# Altium integrated library ATK-CLRK3506B V1.0.IntLib: 69 symbols
Pins are listed as number, name and electrical type; pins without a type are passive.

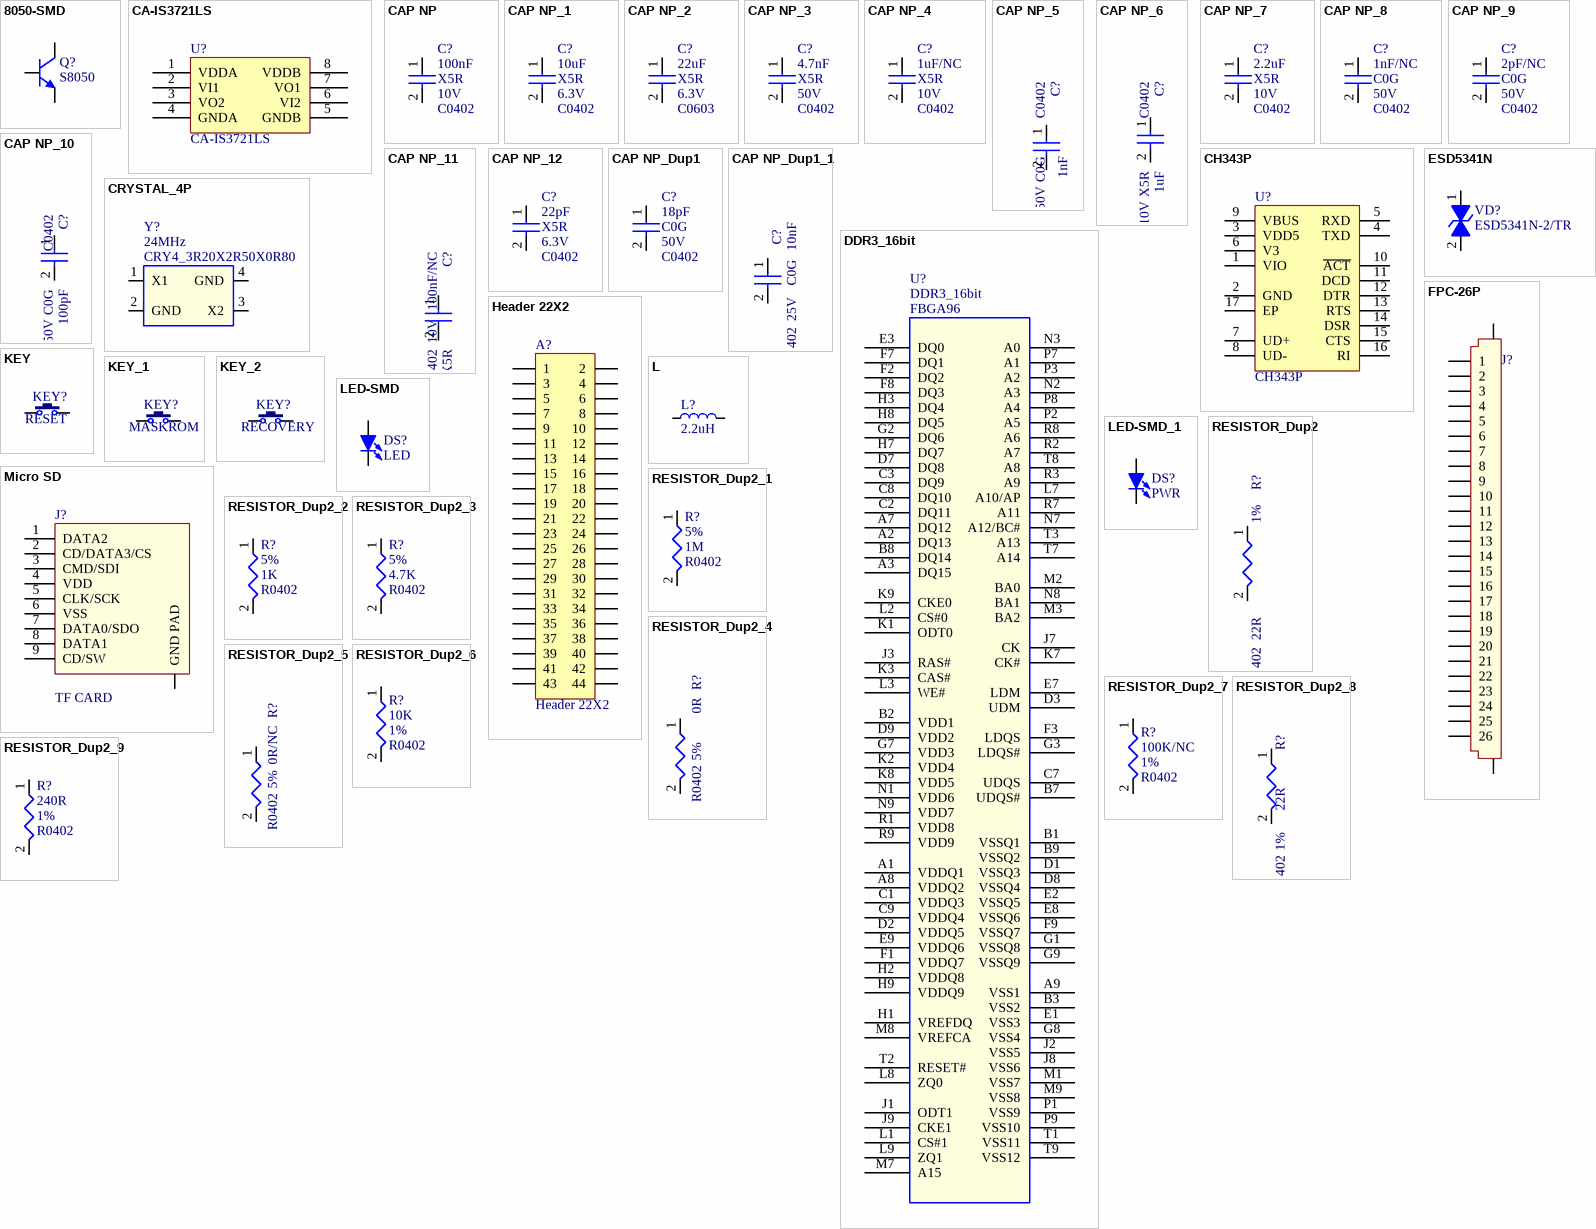
[diagram p0: symbols 8050-SMD to RESISTOR_Dup2_9]

## 8050-SMD
designator Q?, comment S8050
高频放大-NPN型; 版权归属: 正点原子; 属性: 40V 1.5A 1W 100MHZ; Parameter: 三极管; BOM名称: 高频放大-NPN型; 学习资源: www.ooocke.com
footprint SOT23-3N (3x1.3x1mm(长宽高))
footprint SOT23-3L (3x1.3x1mm(长宽高))
footprint SOT23-3M (3x1.3x1mm(长宽高))
footprint SOT323-3L (2x2.2x0.9mm(长宽高))
footprint SOT323-3N (2x2.2x0.9mm(长宽高))
footprint SOT323-3M (2x2.2x0.9mm(长宽高))
pins: 1 B, 2 E, 3 C

## CA-IS3721LS
designator U?
footprint SOIC-8 6.2*5.1 (SOIC-8 6.2*5.1mm)
pins: 1 VDDA, 2 VI1, 3 VO2, 4 GNDA, 5 GNDB, 6 VI2, 7 VO1, 8 VDDB

## CAP NP
designator C?, comment 100nF  Dielectric: X5R  PCB Footprint: C0402  Voltage: 10V
cap,100.00nF,+/-10%,10V,X5R,C0402; Manufacturer PN: 0402X104K100NT; Manufacturer: FH(风华); Tolerance: ±10%; Priority: A; RK PN: 902004351; Created by: JJJ; Part Type: 一般用片状陶瓷电容
footprint C0402
pins: 1, 2

## CAP NP_1
designator C?, comment 10uF  Dielectric: X5R  PCB Footprint: C0402  Voltage: 6.3V
一般用片状陶瓷电容(GRM),cap,10uF,±20%,6.3V,X5R,C0402; Manufacturer PN: 0402X104K100NT; Manufacturer: FH(风华); Tolerance: ±10%; Priority: A; RK PN: 902004351; Created by: JJJ; Part Type: 一般用片状陶瓷电容
footprint C0402
pins: 1, 2

## CAP NP_2
designator C?, comment 22uF  Dielectric: X5R  PCB Footprint: C0603  Voltage: 6.3V
一般用片状陶瓷电容(GRM),cap,22uF,±20%,6.3V,X5R,C0603; Manufacturer PN: 0402X104K100NT; Manufacturer: FH(风华); Tolerance: ±10%; Priority: A; RK PN: 902004351; Created by: JJJ; Part Type: 一般用片状陶瓷电容
footprint C0402
footprint C0603
pins: 1, 2

## CAP NP_3
designator C?, comment 4.7nF  Dielectric: X5R  PCB Footprint: C0402  Voltage: 50V
cap,4.7nF,+/-10%,50V,X5R,C0402; Manufacturer PN: 0402X104K100NT; Manufacturer: FH(风华); Tolerance: ±10%; Priority: A; RK PN: 902004351; Created by: JJJ; Part Type: 一般用片状陶瓷电容
footprint C0402
pins: 1, 2

## CAP NP_4
designator C?, comment 1uF/NC  Dielectric: X5R  PCB Footprint: C0402  Voltage: 10V
cap,1uF,+/-10%,10V,X5R,C0402; Manufacturer PN: 0402X104K100NT; Manufacturer: FH(风华); Tolerance: ±10%; Priority: A; RK PN: 902004351; Created by: JJJ; Part Type: 一般用片状陶瓷电容
footprint C0402
pins: 1, 2

## CAP NP_5
designator C?, comment 1nF  Dielectric: C0G  PCB Footprint: C0402  Voltage: 50V
一般用片状陶瓷电容(GRM),cap,1nF,±5%,50V,C0G,C0402; Manufacturer PN: 0402X104K100NT; Manufacturer: FH(风华); Tolerance: ±10%; Priority: A; RK PN: 902004351; Created by: JJJ; Part Type: 一般用片状陶瓷电容
footprint C0402
pins: 1, 2

## CAP NP_6
designator C?, comment 1uF  Dielectric: X5R  PCB Footprint: C0402  Voltage: 10V
cap,1uF,+/-10%,10V,X5R,C0402; Manufacturer PN: 0402X104K100NT; Manufacturer: FH(风华); Tolerance: ±10%; Priority: A; RK PN: 902004351; Created by: JJJ; Part Type: 一般用片状陶瓷电容
footprint C0402
pins: 1, 2

## CAP NP_7
designator C?, comment 2.2uF  Dielectric: X5R  PCB Footprint: C0402  Voltage: 10V
cap,2.2uF,+/-10%,10V,X5R,C0402; Manufacturer PN: 0402X104K100NT; Manufacturer: FH(风华); Tolerance: ±10%; Priority: A; RK PN: 902004351; Created by: JJJ; Part Type: 一般用片状陶瓷电容
footprint C0402
pins: 1, 2

## CAP NP_8
designator C?, comment 1nF/NC  Dielectric: C0G  PCB Footprint: C0402  Voltage: 50V
一般用片状陶瓷电容(GRM),cap,1nF,±5%,50V,C0G,C0402; Manufacturer PN: 0402X104K100NT; Manufacturer: FH(风华); Tolerance: ±10%; Priority: A; RK PN: 902004351; Created by: JJJ; Part Type: 一般用片状陶瓷电容
footprint C0402
pins: 1, 2

## CAP NP_9
designator C?, comment 2pF/NC  Dielectric: C0G  PCB Footprint: C0402  Voltage: 50V
一般用片状陶瓷电容(GRM),cap,2nF,±5%,50V,C0G,C0402; Manufacturer PN: 0402X104K100NT; Manufacturer: FH(风华); Tolerance: ±10%; Priority: A; RK PN: 902004351; Created by: JJJ; Part Type: 一般用片状陶瓷电容
footprint C0402
pins: 1, 2

## CAP NP_10
designator C?, comment 100pF  Dielectric: C0G  PCB Footprint: C0402  Voltage: 50V
一般用片状陶瓷电容(GRM),cap,100pF,±5%,50V,C0G,C0402; Manufacturer PN: 0402X104K100NT; Manufacturer: FH(风华); Tolerance: ±10%; Priority: A; RK PN: 902004351; Created by: JJJ; Part Type: 一般用片状陶瓷电容
footprint C0402
pins: 1, 2

## CAP NP_11
designator C?, comment 100nF/NC  Dielectric: X5R  PCB Footprint: C0402  Voltage: 10V
cap,100.00nF,+/-10%,10V,X5R,C0402; Manufacturer PN: 0402X104K100NT; Manufacturer: FH(风华); Tolerance: ±10%; Priority: A; RK PN: 902004351; Created by: JJJ; Part Type: 一般用片状陶瓷电容
footprint C0402
pins: 1, 2

## CAP NP_12
designator C?, comment 22pF  Dielectric: X5R  PCB Footprint: C0402  Voltage: 6.3V
一般用片状陶瓷电容(GRM),cap,22pF,±20%,6.3V,X5R,C0402; Manufacturer PN: 0402X104K100NT; Manufacturer: FH(风华); Tolerance: ±10%; Priority: A; RK PN: 902004351; Created by: JJJ; Part Type: 一般用片状陶瓷电容
footprint C0402
pins: 1, 2

## CAP NP_Dup1
designator C?, comment 18pF  Voltage: 50V  PCB Footprint: C0402  Dielectric: C0G
cap,18.00pF,+/-5%,50V,C0G,C0402; Manufacturer PN: C1005C0G1H180J050BA; Manufacturer: TDK; C_Voltage: 6.3V; Tolerance: 5%; Priority: A; Number: 37; Created by: JJJ; Part Type: C0402; RK PN: C1005C0G1H180J050BA
footprint C0402
pins: 1, 2

## CAP NP_Dup1_1
designator C?, comment 10nF  Voltage: 25V  PCB Footprint: C0402  Dielectric: C0G
cap,10nF,+/-5%,25V,C0G,C0402; Manufacturer PN: C1005C0G1H180J050BA; Manufacturer: TDK; C_Voltage: 6.3V; Tolerance: 5%; Priority: A; Number: 37; Created by: JJJ; Part Type: C0402; RK PN: C1005C0G1H180J050BA
footprint C0402
pins: 1, 2

## CH343P
designator U?
USB2UART
footprint TQFN-16 (CH343P)
footprint QFN-16-1EP_3X3MM_P0.5MM_EP1.75X1.75MM
pins: 1 VIO, 2 GND, 3 VDD5, 4 TXD, 5 RXD, 6 V3, 7 UD+, 8 UD-, 9 VBUS, 10 ~{ACT}, 11 DCD, 12 DTR, 13 RTS, 14 DSR, 15 CTS, 16 RI, 17 EP

## CRYSTAL_4P
designator Y?, comment 24MHz  PCB Footprint: CRY4_3R20X2R50X0R80
无源晶振，24M，3225,±10ppm，12pF，Hosonic; Manufacturer PN: E3SB24.0000F12E11; Manufacturer: Hosonic(鸿星电子); Priority: A; RK PN: 999,000,104; Created by: JJJ; Part Type: CRYSTAL
footprint CRY-3225
footprint CRY4_3R20X2R50X0R80
footprint XTAL-3225
pins: 1 X1, 2 GND (power), 3 X2, 4 GND (power)

## DDR3_16bit
designator U?  PCB Footprint: FBGA96
256x16; Manufacturer: Samsung（三星）; Manufacturer PN: K4B2G1646F-BYMA; RK PN: DDR3; Priority: A; Part Type: DRAM; Created by: JJJ
footprint DDRII_X16
footprint FBGA96_14R00X11R00X1R20
pins: A1 VDDQ1, A2 DQ13, A3 DQ15, A7 DQ12, A8 VDDQ2, A9 VSS1, B1 VSSQ1, B2 VDD1, B3 VSS2, B7 UDQS#, B8 DQ14, B9 VSSQ2, C1 VDDQ3, C2 DQ11, C3 DQ9, C7 UDQS, C8 DQ10, C9 VDDQ4, D1 VSSQ3, D2 VDDQ5, D3 UDM, D7 DQ8, D8 VSSQ4, D9 VDD2, E1 VSS3, E2 VSSQ5, E3 DQ0, E7 LDM, E8 VSSQ6, E9 VDDQ6, F1 VDDQ7, F2 DQ2, F3 LDQS, F7 DQ1, F8 DQ3, F9 VSSQ7, G1 VSSQ8, G2 DQ6, G3 LDQS#, G7 VDD3, G8 VSS4, G9 VSSQ9, H1 VREFDQ, H2 VDDQ8, H3 DQ4, H7 DQ7, H8 DQ5, H9 VDDQ9, J1 ODT1, J2 VSS5, J3 RAS#, J7 CK, J8 VSS6, J9 CKE1, K1 ODT0, K2 VDD4, K3 CAS#, K7 CK#, K8 VDD5, K9 CKE0, L1 CS#1, L2 CS#0, L3 WE#, L7 A10/AP, L8 ZQ0, L9 ZQ1, M1 VSS7, M2 BA0, M3 BA2, M7 A15, M8 VREFCA, M9 VSS8, N1 VDD6, N2 A3, N3 A0, N7 A12/BC#, N8 BA1, N9 VDD7, P1 VSS9, P2 A5, P3 A2, P7 A1, P8 A4, P9 VSS10, R1 VDD8, R2 A7, R3 A9, R7 A11, R8 A6, R9 VDD9, T1 VSS11, T2 RESET#, T3 A13, T7 A14, T8 A8, T9 VSS12

## ESD5341N
designator VD?, comment ESD5341N-2/TR
ESD二极管-单向
footprint ESD0402
pins: 1, 2

## FPC-26P
designator J?, comment FPC0.5-26P  (value not drawn)
FPC连接器; 版权归属: 正点原子; Parameter: 接口器件; BOM名称: FPC连接器; 学习资源: www.openedv.com
footprint FPC 1.25 26P V-T (FPC插座1.25mm 26P 立式直插)
footprint FPC 1.0 26P H-S (FPC座1.0mm 26P 卧式贴片)
footprint FPC0.5 2H-S-W-26P (长：17.2mm，宽：5.2mm，高：2mm)
footprint FPC 0.5 26P V-S (FPC座 0.5mm 26P 立式贴片)
footprint HEADER 2.0 2X11P (2.0mm 直插排针)
footprint FPC 0.5 26P V-S (FPC座 0.5mm 26P 立式贴片)
pins: 0, 0, 1, 2, 3, 4, 5, 6, 7, 8, 9, 10, 11, 12, 13, 14, 15, 16, 17, 18, 19, 20, 21, 22, 23, 24, 25, 26

## Header 22X2
designator A?
22*2P接插件; 版权归属: 正点原子; Parameter: 接插件; 学习资源: www.openedv.com
footprint HDR-22X2 (双排排针，22x2脚)
pins: 1, 2, 3, 4, 5, 6, 7, 8, 9, 10, 11, 12, 13, 14, 15, 16, 17, 18, 19, 20, 21, 22, 23, 24, 25, 26, 27, 28, 29, 30, 31, 32, 33, 34, 35, 36, 37, 38, 39, 40, 41, 42, 43, 44

## KEY
designator KEY?, comment RESET
按键; BOM名称: 3x6轻触开关; 版权归属: 正点原子; 学习资源: www.openedv.com
footprint TSW DIP-6*6*5 (6*6*5mm)
footprint TSW SMD-2S
footprint TSW SMD-3*6*2.5 (3*6*2.5mm)
footprint TSW SMD-3*6*4.3 (3*6*4.3mm)
footprint TSW SMD-3*6*5 (3*6*5mm)
footprint KEY_SOP324225 (KEY,3.2mm*4.2mm*2.5mm)
pins: 1, 2

## KEY_1
designator KEY?, comment MASKROM
按键; BOM名称: 3x6轻触开关; 版权归属: 正点原子; 学习资源: www.openedv.com
footprint TSW DIP-6*6*5 (6*6*5mm)
footprint TSW SMD-2S
footprint TSW SMD-3*6*2.5 (3*6*2.5mm)
footprint TSW SMD-3*6*4.3 (3*6*4.3mm)
footprint TSW SMD-3*6*5 (3*6*5mm)
footprint KEY_SOP324225 (KEY,3.2mm*4.2mm*2.5mm)
pins: 1, 2

## KEY_2
designator KEY?, comment RECOVERY
按键; BOM名称: 3x6轻触开关; 版权归属: 正点原子; 学习资源: www.openedv.com
footprint TSW DIP-6*6*5 (6*6*5mm)
footprint TSW SMD-2S
footprint TSW SMD-3*6*2.5 (3*6*2.5mm)
footprint TSW SMD-3*6*4.3 (3*6*4.3mm)
footprint TSW SMD-3*6*5 (3*6*5mm)
footprint KEY_SOP324225 (KEY,3.2mm*4.2mm*2.5mm)
pins: 1, 2

## L
designator L?, comment 2.2uH
一体成型电感，厂商:长江微电，型号：FTC201610S2R2MBCA，额定电流2.5A，饱和电流3.0A; BOM名称: 小功率贴片电感; 版权归属: 正点原子; Parameter: 电感/磁珠; 学习资源: www.openedv.com
footprint L 0402 (小功率贴片电感)
footprint L 0603 (小功率贴片电感)
footprint L 0805 (小功率贴片电感)
footprint L 1206 (小功率贴片电感)
footprint L 1210 (小功率贴片电感)
footprint L 1806 (小功率贴片电感)
footprint L 1812 (小功率贴片电感)
footprint L 1008 (2.5mm*2.0mm*1.2mm(长*宽*高）)
footprint L_2520
footprint Model Name (Footprint not found)
footprint L 0806/2016
pins: 1, 2

## LED-SMD
designator DS?, comment LED
贴片黄绿LED; BOM名称: 贴片LED; 版权归属: 正点原子; Parameter: 发光二极管; 学习资源: www.openedv.com
footprint LED 0603W (白色0603LED)
footprint LED 0603R (红色0603LED)
footprint LED 0603B (蓝色0603LED)
footprint LED 0603G (绿色0603LED)
footprint LED 0603Y (黄色0603LED)
footprint LED 0805G (绿色0805LED)
footprint LED 0805R (红色0805LED)
footprint LED 0805B (蓝色0805LED)
footprint LED 0805Y (黄色0805LED)
footprint LED 3528 (白色3528LED)
footprint LED 1206G (绿色1206LED)
footprint LED 5730-V (紫色5730LED)
footprint LED 1206Y (黄色1206LED)
footprint LED 0805W (白色0805LED)
footprint LED 1206B (蓝色1206LED)
footprint LED 1206W (白色1206LED)
footprint LED 1206R (红色1206LED)
pins: 1 A, 2 K

## LED-SMD_1
designator DS?, comment PWR
贴片LED; 版权归属: 正点原子; Parameter: 发光二极管; BOM名称: 贴片LED; 学习资源: www.openedv.com
footprint LED 0603W (白色0603LED)
footprint LED 0603R (红色0603LED)
footprint LED 0603B (蓝色0603LED)
footprint LED 0603G (绿色0603LED)
footprint LED 0603Y (黄色0603LED)
footprint LED 0805G (绿色0805LED)
footprint LED 0805R (红色0805LED)
footprint LED 0805B (蓝色0805LED)
footprint LED 0805Y (黄色0805LED)
footprint LED 3528 (白色3528LED)
footprint LED 1206G (绿色1206LED)
footprint LED 5730-V (紫色5730LED)
footprint LED 1206Y (黄色1206LED)
footprint LED 0805W (白色0805LED)
footprint LED 1206B (蓝色1206LED)
footprint LED 1206W (白色1206LED)
footprint LED 1206R (红色1206LED)
pins: 1 A, 2 K

## Micro SD
designator J?, comment TF CARD
Micro SD卡; 版权归属: 正点原子; BOM名称: Micro SD卡; 学习资源: www.openedv.com
footprint Micro SD
pins: 0 GND PAD, 1 DATA2, 2 CD/DATA3/CS, 3 CMD/SDI, 4 VDD, 5 CLK/SCK, 6 VSS, 7 DATA0/SDO, 8 DATA1, 9 CD/SW

## RESISTOR_Dup2
designator R?, comment 22R  PCB Footprint: R0402  Tolerance: 1%
通用厚膜电阻,22R,+/-1%,R0402,1/16W.; Manufacturer: YAGEO; RK PN: RC0402JR-0722RL; Priority: A; Wattage: 1/16W; Part Type: 通用厚膜电阻; Manufacturer PN: RC0402JR-0722RL; Created by: YTL
footprint R0402
pins: 1, 2

## RESISTOR_Dup2_1
designator R?, comment 1M  PCB Footprint: R0402  Tolerance: 5%
通用厚膜电阻,1M,+/-5%,R0402,1/16W.; Manufacturer: YAGEO; RK PN: RC0402JR-0722RL; Priority: A; Wattage: 1/16W; Part Type: 通用厚膜电阻; Manufacturer PN: RC0402JR-0722RL; Created by: YTL
footprint R0402
pins: 1, 2

## RESISTOR_Dup2_2
designator R?, comment 1K  PCB Footprint: R0402  Tolerance: 5%
通用厚膜电阻,1K,+/-5%,R0402,1/16W.; Manufacturer: YAGEO; RK PN: RC0402JR-0722RL; Priority: A; Wattage: 1/16W; Part Type: 通用厚膜电阻; Manufacturer PN: RC0402JR-0722RL; Created by: YTL
footprint R0402
pins: 1, 2

## RESISTOR_Dup2_3
designator R?, comment 4.7K  PCB Footprint: R0402  Tolerance: 5%
通用厚膜电阻,4.7K,+/-5%,R0402,1/16W.; Manufacturer: YAGEO; RK PN: RC0402JR-0722RL; Priority: A; Wattage: 1/16W; Part Type: 通用厚膜电阻; Manufacturer PN: RC0402JR-0722RL; Created by: YTL
footprint R0402
pins: 1, 2

## RESISTOR_Dup2_4
designator R?, comment 0R  PCB Footprint: R0402  Tolerance: 5%
通用厚膜电阻,0R,+/-5%,R0402,1/16W.; Manufacturer: YAGEO; RK PN: RC0402JR-0722RL; Priority: A; Wattage: 1/16W; Part Type: 通用厚膜电阻; Manufacturer PN: RC0402JR-0722RL; Created by: YTL
footprint R0402
pins: 1, 2

## RESISTOR_Dup2_5
designator R?, comment 0R/NC  PCB Footprint: R0402  Tolerance: 5%
通用厚膜电阻,0R,+/-5%,R0402,1/16W.; Manufacturer: YAGEO; RK PN: RC0402JR-0722RL; Priority: A; Wattage: 1/16W; Part Type: 通用厚膜电阻; Manufacturer PN: RC0402JR-0722RL; Created by: YTL
footprint R0402
pins: 1, 2

## RESISTOR_Dup2_6
designator R?, comment 10K  PCB Footprint: R0402  Tolerance: 1%
通用厚膜电阻,10K,+/-1%,R0402,1/16W.; Manufacturer: YAGEO; RK PN: RC0402JR-0722RL; Priority: A; Wattage: 1/16W; Part Type: 通用厚膜电阻; Manufacturer PN: RC0402JR-0722RL; Created by: YTL
footprint R0402
pins: 1, 2

## RESISTOR_Dup2_7
designator R?, comment 100K/NC  PCB Footprint: R0402  Tolerance: 1%
通用厚膜电阻,100K,+/-1%,R0402,1/16W.; Manufacturer: YAGEO; RK PN: RC0402JR-0722RL; Priority: A; Wattage: 1/16W; Part Type: 通用厚膜电阻; Manufacturer PN: RC0402JR-0722RL; Created by: YTL
footprint R0402
pins: 1, 2

## RESISTOR_Dup2_8
designator R?, comment 22R  PCB Footprint: R0402  Tolerance: 1%
通用厚膜电阻,0R,+/-1%,R0402,1/16W.; Manufacturer: YAGEO; RK PN: RC0402JR-0722RL; Priority: A; Wattage: 1/16W; Part Type: 通用厚膜电阻; Manufacturer PN: RC0402JR-0722RL; Created by: YTL
footprint R0402
pins: 1, 2

## RESISTOR_Dup2_9
designator R?, comment 240R  PCB Footprint: R0402  Tolerance: 1%
通用厚膜电阻,240R,+/-1%,R0402,1/16W.; Manufacturer: YAGEO; RK PN: RC0402JR-0722RL; Priority: A; Wattage: 1/16W; Part Type: 通用厚膜电阻; Manufacturer PN: RC0402JR-0722RL; Created by: YTL
footprint R0402
pins: 1, 2

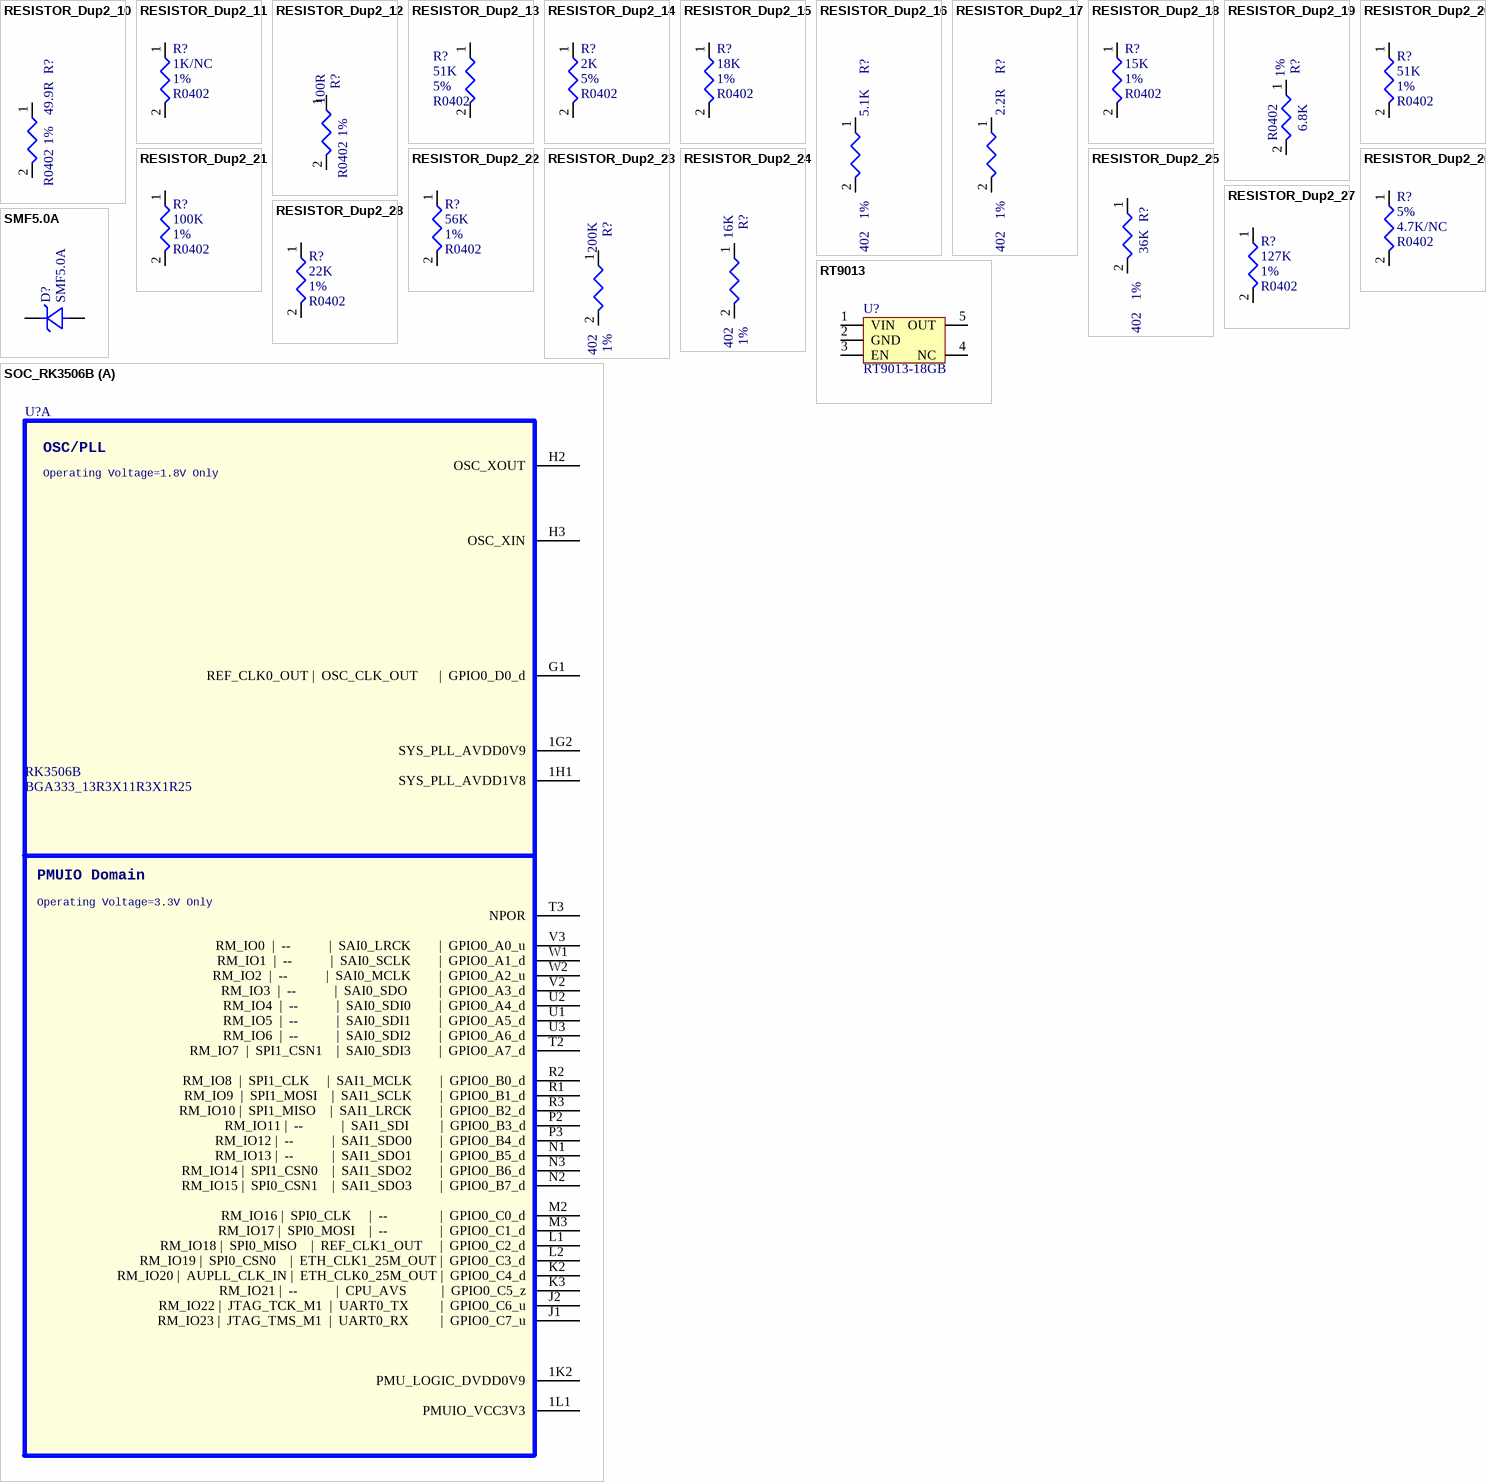
[diagram p1: symbols RESISTOR_Dup2_10 to SOC_RK3506B]

## RESISTOR_Dup2_10
designator R?, comment 49.9R  PCB Footprint: R0402  Tolerance: 1%
通用厚膜电阻,49.9R,+/-1%,R0402,1/16W.; Manufacturer: YAGEO; RK PN: RC0402JR-0722RL; Priority: A; Wattage: 1/16W; Part Type: 通用厚膜电阻; Manufacturer PN: RC0402JR-0722RL; Created by: YTL
footprint R0402
pins: 1, 2

## RESISTOR_Dup2_11
designator R?, comment 1K/NC  PCB Footprint: R0402  Tolerance: 1%
通用厚膜电阻,1K,+/-1%,R0402,1/16W.; Manufacturer: YAGEO; RK PN: RC0402JR-0722RL; Priority: A; Wattage: 1/16W; Part Type: 通用厚膜电阻; Manufacturer PN: RC0402JR-0722RL; Created by: YTL
footprint R0402
pins: 1, 2

## RESISTOR_Dup2_12
designator R?, comment 100R  PCB Footprint: R0402  Tolerance: 1%
通用厚膜电阻,100R,+/-1%,R0402,1/16W.; Manufacturer: YAGEO; RK PN: RC0402JR-0722RL; Priority: A; Wattage: 1/16W; Part Type: 通用厚膜电阻; Manufacturer PN: RC0402JR-0722RL; Created by: YTL
footprint R0402
pins: 1, 2

## RESISTOR_Dup2_13
designator R?, comment 51K  PCB Footprint: R0402  Tolerance: 5%
通用厚膜电阻,51K,+/-5%,R0402,1/16W.; Manufacturer: YAGEO; RK PN: RC0402JR-0722RL; Priority: A; Wattage: 1/16W; Part Type: 通用厚膜电阻; Manufacturer PN: RC0402JR-0722RL; Created by: YTL
footprint R0402
pins: 1, 2

## RESISTOR_Dup2_14
designator R?, comment 2K  PCB Footprint: R0402  Tolerance: 5%
通用厚膜电阻,2K,+/-5%,R0402,1/16W.; Manufacturer: YAGEO; RK PN: RC0402JR-0722RL; Priority: A; Wattage: 1/16W; Part Type: 通用厚膜电阻; Manufacturer PN: RC0402JR-0722RL; Created by: YTL
footprint R0402
pins: 1, 2

## RESISTOR_Dup2_15
designator R?, comment 18K  PCB Footprint: R0402  Tolerance: 1%
通用厚膜电阻,18K,+/-1%,R0402,1/16W.; Manufacturer: YAGEO; RK PN: RC0402JR-0722RL; Priority: A; Wattage: 1/16W; Part Type: 通用厚膜电阻; Manufacturer PN: RC0402JR-0722RL; Created by: YTL
footprint R0402
pins: 1, 2

## RESISTOR_Dup2_16
designator R?, comment 5.1K  PCB Footprint: R0402  Tolerance: 1%
通用厚膜电阻,5.1K,+/-1%,R0402,1/16W.; Manufacturer: YAGEO; RK PN: RC0402JR-0722RL; Priority: A; Wattage: 1/16W; Part Type: 通用厚膜电阻; Manufacturer PN: RC0402JR-0722RL; Created by: YTL
footprint R0402
pins: 1, 2

## RESISTOR_Dup2_17
designator R?, comment 2.2R  PCB Footprint: R0402  Tolerance: 1%
通用厚膜电阻,2.2R,+/-1%,R0402,1/16W.; Manufacturer: YAGEO; RK PN: RC0402JR-0722RL; Priority: A; Wattage: 1/16W; Part Type: 通用厚膜电阻; Manufacturer PN: RC0402JR-0722RL; Created by: YTL
footprint R0402
pins: 1, 2

## RESISTOR_Dup2_18
designator R?, comment 15K  PCB Footprint: R0402  Tolerance: 1%
通用厚膜电阻,15K,+/-1%,R0402,1/16W.; Manufacturer: YAGEO; RK PN: RC0402JR-0722RL; Priority: A; Wattage: 1/16W; Part Type: 通用厚膜电阻; Manufacturer PN: RC0402JR-0722RL; Created by: YTL
footprint R0402
pins: 1, 2

## RESISTOR_Dup2_19
designator R?, comment 6.8K  PCB Footprint: R0402  Tolerance: 1%
通用厚膜电阻,6.8K,+/-1%,R0402,1/16W.; Manufacturer: YAGEO; RK PN: RC0402JR-0722RL; Priority: A; Wattage: 1/16W; Part Type: 通用厚膜电阻; Manufacturer PN: RC0402JR-0722RL; Created by: YTL
footprint R0402
pins: 1, 2

## RESISTOR_Dup2_20
designator R?, comment 51K  PCB Footprint: R0402  Tolerance: 1%
通用厚膜电阻,51K,+/-1%,R0402,1/16W.; Manufacturer: YAGEO; RK PN: RC0402JR-0722RL; Priority: A; Wattage: 1/16W; Part Type: 通用厚膜电阻; Manufacturer PN: RC0402JR-0722RL; Created by: YTL
footprint R0402
pins: 1, 2

## RESISTOR_Dup2_21
designator R?, comment 100K  PCB Footprint: R0402  Tolerance: 1%
通用厚膜电阻,100K,+/-1%,R0402,1/16W.; Manufacturer: YAGEO; RK PN: RC0402JR-0722RL; Priority: A; Wattage: 1/16W; Part Type: 通用厚膜电阻; Manufacturer PN: RC0402JR-0722RL; Created by: YTL
footprint R0402
pins: 1, 2

## RESISTOR_Dup2_22
designator R?, comment 56K  PCB Footprint: R0402  Tolerance: 1%
通用厚膜电阻,56K,+/-1%,R0402,1/16W.; Manufacturer: YAGEO; RK PN: RC0402JR-0722RL; Priority: A; Wattage: 1/16W; Part Type: 通用厚膜电阻; Manufacturer PN: RC0402JR-0722RL; Created by: YTL
footprint R0402
pins: 1, 2

## RESISTOR_Dup2_23
designator R?, comment 200K  PCB Footprint: R0402  Tolerance: 1%
通用厚膜电阻,200K,+/-1%,R0402,1/16W.; Manufacturer: YAGEO; RK PN: RC0402JR-0722RL; Priority: A; Wattage: 1/16W; Part Type: 通用厚膜电阻; Manufacturer PN: RC0402JR-0722RL; Created by: YTL
footprint R0402
pins: 1, 2

## RESISTOR_Dup2_24
designator R?, comment 16K  PCB Footprint: R0402  Tolerance: 1%
通用厚膜电阻,16K,+/-1%,R0402,1/16W.; Manufacturer: YAGEO; RK PN: RC0402JR-0722RL; Priority: A; Wattage: 1/16W; Part Type: 通用厚膜电阻; Manufacturer PN: RC0402JR-0722RL; Created by: YTL
footprint R0402
pins: 1, 2

## RESISTOR_Dup2_25
designator R?, comment 36K  PCB Footprint: R0402  Tolerance: 1%
通用厚膜电阻,36K,+/-1%,R0402,1/16W.; Manufacturer: YAGEO; RK PN: RC0402JR-0722RL; Priority: A; Wattage: 1/16W; Part Type: 通用厚膜电阻; Manufacturer PN: RC0402JR-0722RL; Created by: YTL
footprint R0402
pins: 1, 2

## RESISTOR_Dup2_26
designator R?, comment 4.7K/NC  PCB Footprint: R0402  Tolerance: 5%
通用厚膜电阻,4.7K,+/-5%,R0402,1/16W.; Manufacturer: YAGEO; RK PN: RC0402JR-0722RL; Priority: A; Wattage: 1/16W; Part Type: 通用厚膜电阻; Manufacturer PN: RC0402JR-0722RL; Created by: YTL
footprint R0402
pins: 1, 2

## RESISTOR_Dup2_27
designator R?, comment 127K  PCB Footprint: R0402  Tolerance: 1%
通用厚膜电阻,127K,+/-1%,R0402,1/16W.; Manufacturer: YAGEO; RK PN: RC0402JR-0722RL; Priority: A; Wattage: 1/16W; Part Type: 通用厚膜电阻; Manufacturer PN: RC0402JR-0722RL; Created by: YTL
footprint R0402
pins: 1, 2

## RESISTOR_Dup2_28
designator R?, comment 22K  PCB Footprint: R0402  Tolerance: 1%
通用厚膜电阻,22K,+/-1%,R0402,1/16W.; Manufacturer: YAGEO; RK PN: RC0402JR-0722RL; Priority: A; Wattage: 1/16W; Part Type: 通用厚膜电阻; Manufacturer PN: RC0402JR-0722RL; Created by: YTL
footprint R0402
pins: 1, 2

## RT9013
designator U?, comment RT9013-18GB
LDO 5.5V 500mA; BOM名称: 稳压芯片; 版权归属: 正点原子; Parameter: 芯片; 学习资源: www.openedv.com
footprint SOT23-5L (3x1.6x1.1mm(长宽高))
footprint SOT23-5N (3x1.6x1.1mm(长宽高))
footprint SOT23-5M (3x1.6x1.1mm(长宽高))
pins: 1 VIN, 2 GND, 3 EN, 4 NC, 5 OUT

## SMF5.0A
designator D?
SMF5.0A,SOD-123FL
footprint SOD-123FL_L2.7-W1.8-LS3.8-RD (Footprint not found)
pins: 1 K, 2 A

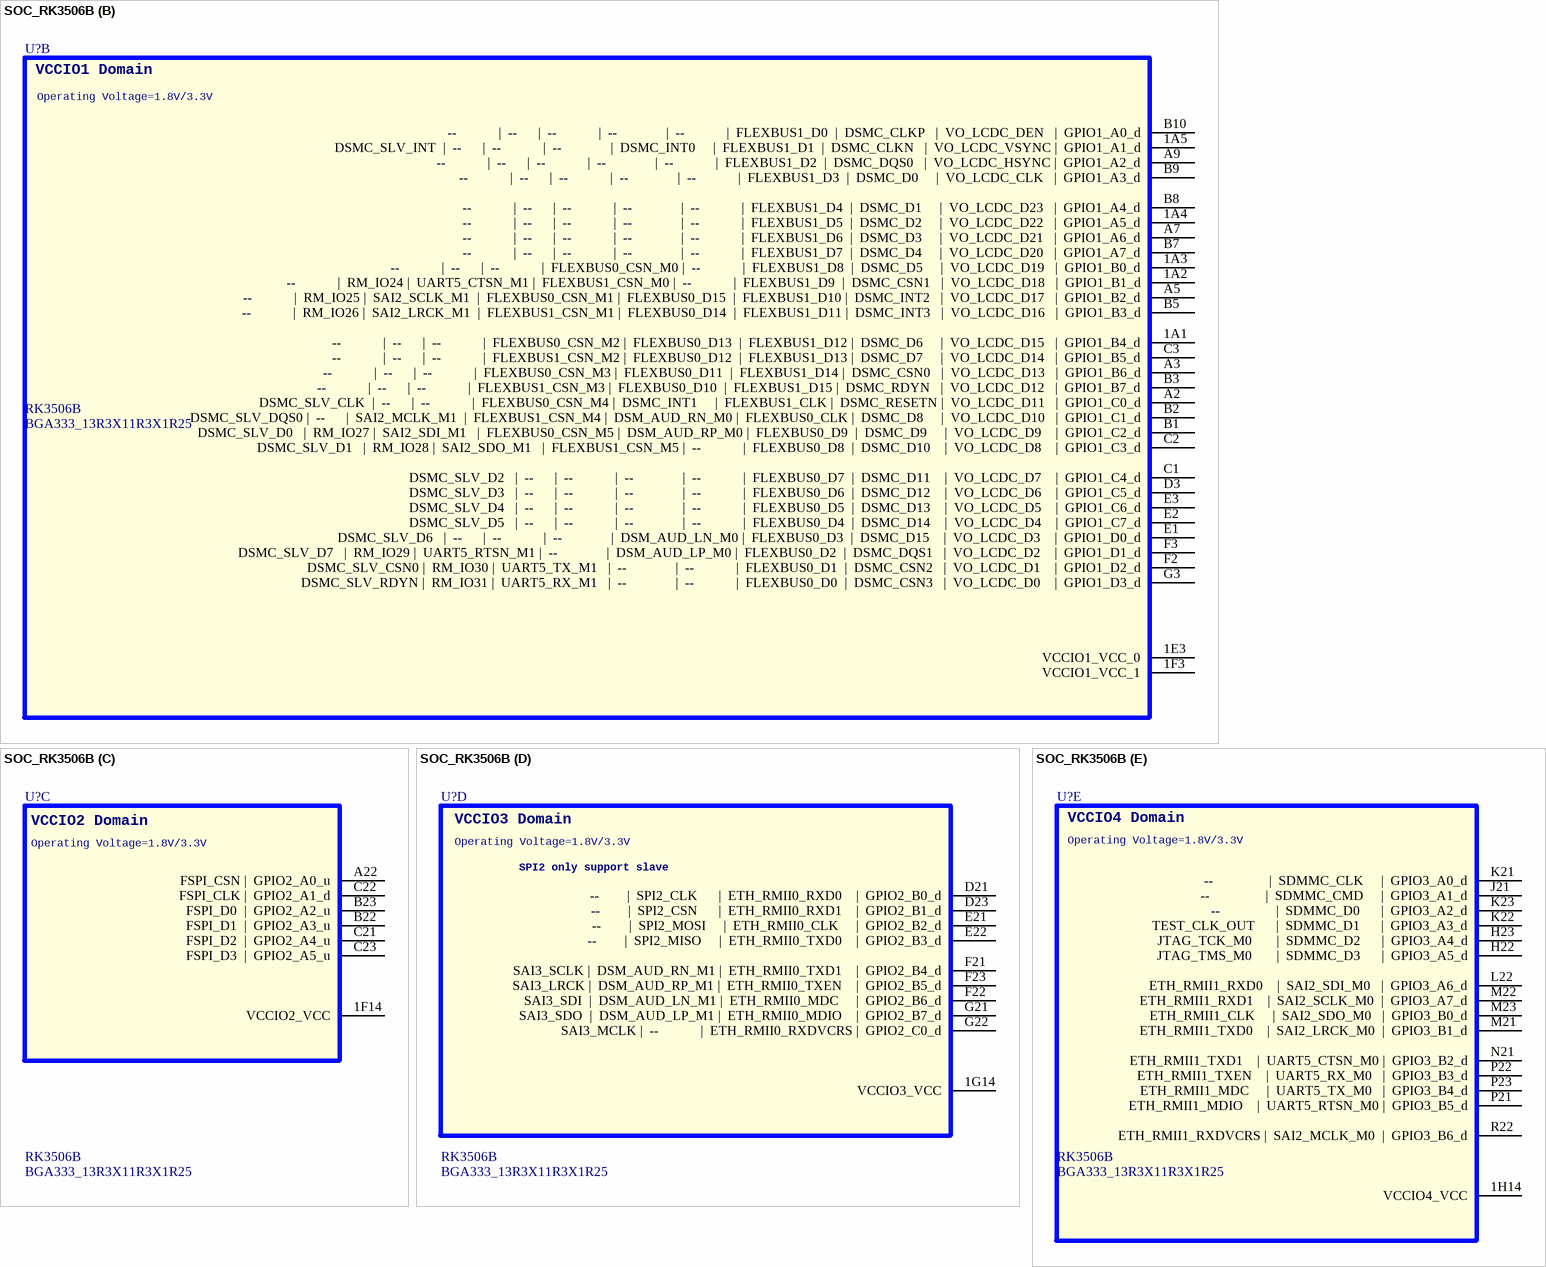
[diagram p2: symbol SOC_RK3506B]

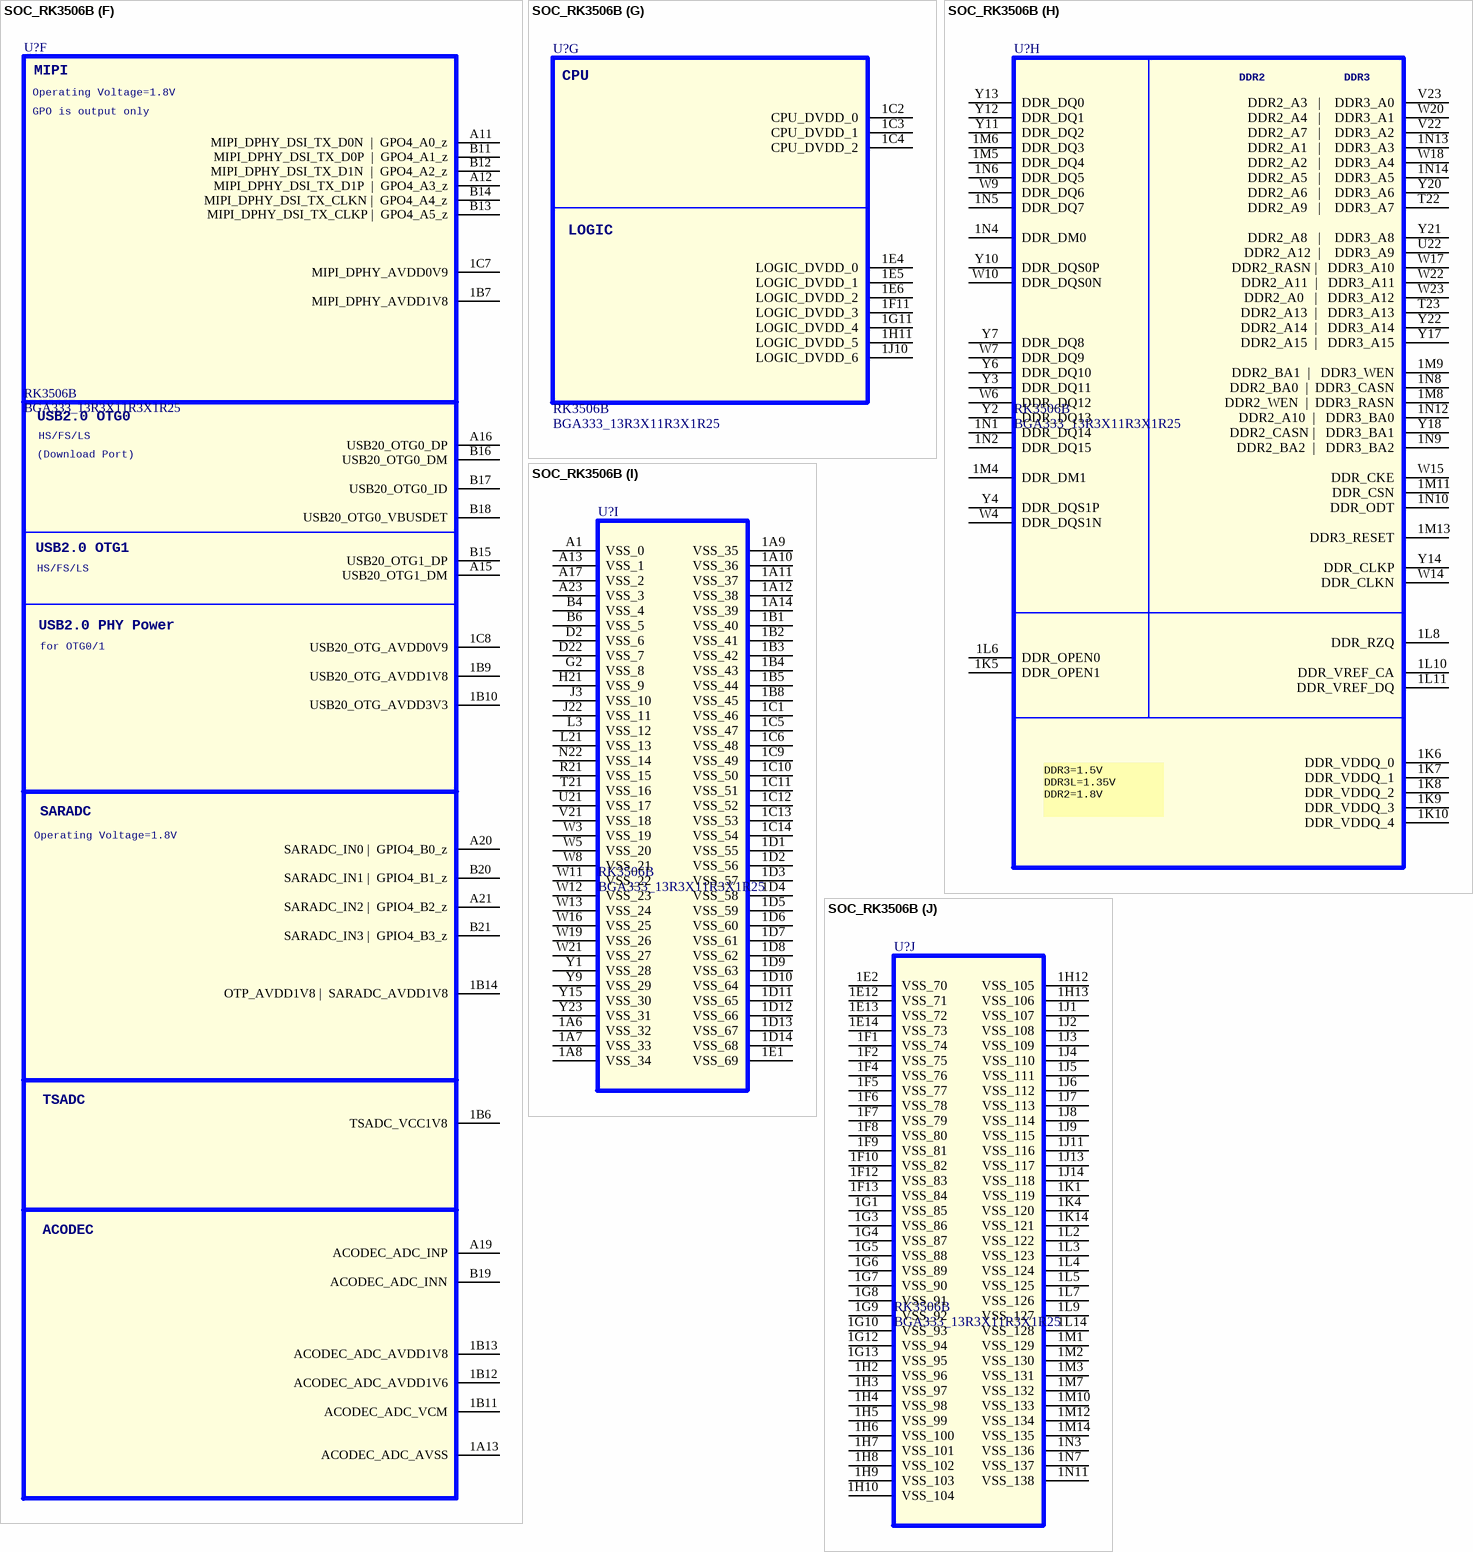
[diagram p3: symbol SOC_RK3506B]

## SOC_RK3506B
designator U?, comment RK3506B  PCB Footprint: BGA333_13R3X11R3X1R25
SPLIT_INST: TURE
footprint BGA333_13R30X11R30X1R25
footprint BGA333_13R3X11R3X1R25
part A pins: 1G2 SYS_PLL_AVDD0V9, 1H1 SYS_PLL_AVDD1V8, 1K2 PMU_LOGIC_DVDD0V9, 1L1 PMUIO_VCC3V3, G1 REF_CLK0_OUT |  OSC_CLK_OUT      |  GPIO0_D0_d, H2 OSC_XOUT, H3 OSC_XIN, J1 RM_IO23 |  JTAG_TMS_M1  |  UART0_RX         |  GPIO0_C7_u, J2 RM_IO22 |  JTAG_TCK_M1  |  UART0_TX         |  GPIO0_C6_u, K2 RM_IO20 |  AUPLL_CLK_IN |  ETH_CLK0_25M_OUT |  GPIO0_C4_d, K3 RM_IO21 |  --           |  CPU_AVS          |  GPIO0_C5_z, L1 RM_IO18 |  SPI0_MISO    |  REF_CLK1_OUT     |  GPIO0_C2_d, L2 RM_IO19 |  SPI0_CSN0    |  ETH_CLK1_25M_OUT |  GPIO0_C3_d, M2 RM_IO16 |  SPI0_CLK     |  --               |  GPIO0_C0_d, M3 RM_IO17 |  SPI0_MOSI    |  --               |  GPIO0_C1_d, N1 RM_IO13 |  --           |  SAI1_SDO1        |  GPIO0_B5_d, N2 RM_IO15 |  SPI0_CSN1    |  SAI1_SDO3        |  GPIO0_B7_d, N3 RM_IO14 |  SPI1_CSN0    |  SAI1_SDO2        |  GPIO0_B6_d, P2 RM_IO11 |  --           |  SAI1_SDI         |  GPIO0_B3_d, P3 RM_IO12 |  --           |  SAI1_SDO0        |  GPIO0_B4_d, R1 RM_IO9  |  SPI1_MOSI    |  SAI1_SCLK        |  GPIO0_B1_d, R2 RM_IO8  |  SPI1_CLK     |  SAI1_MCLK        |  GPIO0_B0_d, R3 RM_IO10 |  SPI1_MISO    |  SAI1_LRCK        |  GPIO0_B2_d, T2 RM_IO7  |  SPI1_CSN1    |  SAI0_SDI3        |  GPIO0_A7_d, T3 NPOR, U1 RM_IO5  |  --           |  SAI0_SDI1        |  GPIO0_A5_d, U2 RM_IO4  |  --           |  SAI0_SDI0        |  GPIO0_A4_d, U3 RM_IO6  |  --           |  SAI0_SDI2        |  GPIO0_A6_d, V2 RM_IO3  |  --           |  SAI0_SDO         |  GPIO0_A3_d, V3 RM_IO0  |  --           |  SAI0_LRCK        |  GPIO0_A0_u, W1 RM_IO1  |  --           |  SAI0_SCLK        |  GPIO0_A1_d, W2 RM_IO2  |  --           |  SAI0_MCLK        |  GPIO0_A2_u
part B pins: 1A1 --            |  --      |  --            |  FLEXBUS0_CSN_M2 |  FLEXBUS0_D13  |  FLEXBUS1_D12 |  DSMC_D6     |  VO_LCDC_D15   |  GPIO1_B4_d, 1A2 --            |  RM_IO24 |  UART5_CTSN_M1 |  FLEXBUS1_CSN_M0 |  --            |  FLEXBUS1_D9  |  DSMC_CSN1   |  VO_LCDC_D18   |  GPIO1_B1_d, 1A3 --            |  --      |  --            |  FLEXBUS0_CSN_M0 |  --            |  FLEXBUS1_D8  |  DSMC_D5     |  VO_LCDC_D19   |  GPIO1_B0_d, 1A4 --            |  --      |  --            |  --              |  --            |  FLEXBUS1_D5  |  DSMC_D2     |  VO_LCDC_D22   |  GPIO1_A5_d, 1A5 DSMC_SLV_INT  |  --      |  --            |  --              |  DSMC_INT0     |  FLEXBUS1_D1  |  DSMC_CLKN   |  VO_LCDC_VSYNC |  GPIO1_A1_d, 1E3 VCCIO1_VCC_0, 1F3 VCCIO1_VCC_1, A2 DSMC_SLV_CLK  |  --      |  --            |  FLEXBUS0_CSN_M4 |  DSMC_INT1     |  FLEXBUS1_CLK |  DSMC_RESETN |  VO_LCDC_D11   |  GPIO1_C0_d, A3 --            |  --      |  --            |  FLEXBUS0_CSN_M3 |  FLEXBUS0_D11  |  FLEXBUS1_D14 |  DSMC_CSN0   |  VO_LCDC_D13   |  GPIO1_B6_d, A5 --            |  RM_IO25 |  SAI2_SCLK_M1  |  FLEXBUS0_CSN_M1 |  FLEXBUS0_D15  |  FLEXBUS1_D10 |  DSMC_INT2   |  VO_LCDC_D17   |  GPIO1_B2_d, A7 --            |  --      |  --            |  --              |  --            |  FLEXBUS1_D6  |  DSMC_D3     |  VO_LCDC_D21   |  GPIO1_A6_d, A9 --            |  --      |  --            |  --              |  --            |  FLEXBUS1_D2  |  DSMC_DQS0   |  VO_LCDC_HSYNC |  GPIO1_A2_d, B1 DSMC_SLV_D0   |  RM_IO27 |  SAI2_SDI_M1   |  FLEXBUS0_CSN_M5 |  DSM_AUD_RP_M0 |  FLEXBUS0_D9  |  DSMC_D9     |  VO_LCDC_D9    |  GPIO1_C2_d, B2 DSMC_SLV_DQS0 |  --      |  SAI2_MCLK_M1  |  FLEXBUS1_CSN_M4 |  DSM_AUD_RN_M0 |  FLEXBUS0_CLK |  DSMC_D8     |  VO_LCDC_D10   |  GPIO1_C1_d, B3 --            |  --      |  --            |  FLEXBUS1_CSN_M3 |  FLEXBUS0_D10  |  FLEXBUS1_D15 |  DSMC_RDYN   |  VO_LCDC_D12   |  GPIO1_B7_d, B5 --            |  RM_IO26 |  SAI2_LRCK_M1  |  FLEXBUS1_CSN_M1 |  FLEXBUS0_D14  |  FLEXBUS1_D11 |  DSMC_INT3   |  VO_LCDC_D16   |  GPIO1_B3_d, B7 --            |  --      |  --            |  --              |  --            |  FLEXBUS1_D7  |  DSMC_D4     |  VO_LCDC_D20   |  GPIO1_A7_d, B8 --            |  --      |  --            |  --              |  --            |  FLEXBUS1_D4  |  DSMC_D1     |  VO_LCDC_D23   |  GPIO1_A4_d, B9 --            |  --      |  --            |  --              |  --            |  FLEXBUS1_D3  |  DSMC_D0     |  VO_LCDC_CLK   |  GPIO1_A3_d, B10 --            |  --      |  --            |  --              |  --            |  FLEXBUS1_D0  |  DSMC_CLKP   |  VO_LCDC_DEN   |  GPIO1_A0_d, C1 DSMC_SLV_D2   |  --      |  --            |  --              |  --            |  FLEXBUS0_D7  |  DSMC_D11    |  VO_LCDC_D7    |  GPIO1_C4_d, C2 DSMC_SLV_D1   |  RM_IO28 |  SAI2_SDO_M1   |  FLEXBUS1_CSN_M5 |  --            |  FLEXBUS0_D8  |  DSMC_D10    |  VO_LCDC_D8    |  GPIO1_C3_d, C3 --            |  --      |  --            |  FLEXBUS1_CSN_M2 |  FLEXBUS0_D12  |  FLEXBUS1_D13 |  DSMC_D7     |  VO_LCDC_D14   |  GPIO1_B5_d, D3 DSMC_SLV_D3   |  --      |  --            |  --              |  --            |  FLEXBUS0_D6  |  DSMC_D12    |  VO_LCDC_D6    |  GPIO1_C5_d, E1 DSMC_SLV_D6   |  --      |  --            |  --              |  DSM_AUD_LN_M0 |  FLEXBUS0_D3  |  DSMC_D15    |  VO_LCDC_D3    |  GPIO1_D0_d, E2 DSMC_SLV_D5   |  --      |  --            |  --              |  --            |  FLEXBUS0_D4  |  DSMC_D14    |  VO_LCDC_D4    |  GPIO1_C7_d, E3 DSMC_SLV_D4   |  --      |  --            |  --              |  --            |  FLEXBUS0_D5  |  DSMC_D13    |  VO_LCDC_D5    |  GPIO1_C6_d, F2 DSMC_SLV_CSN0 |  RM_IO30 |  UART5_TX_M1   |  --              |  --            |  FLEXBUS0_D1  |  DSMC_CSN2   |  VO_LCDC_D1    |  GPIO1_D2_d, F3 DSMC_SLV_D7   |  RM_IO29 |  UART5_RTSN_M1 |  --              |  DSM_AUD_LP_M0 |  FLEXBUS0_D2  |  DSMC_DQS1   |  VO_LCDC_D2    |  GPIO1_D1_d, G3 DSMC_SLV_RDYN |  RM_IO31 |  UART5_RX_M1   |  --              |  --            |  FLEXBUS0_D0  |  DSMC_CSN3   |  VO_LCDC_D0    |  GPIO1_D3_d
part C pins: 1F14 VCCIO2_VCC, A22 FSPI_CSN |  GPIO2_A0_u, B22 FSPI_D1  |  GPIO2_A3_u, B23 FSPI_D0  |  GPIO2_A2_u, C21 FSPI_D2  |  GPIO2_A4_u, C22 FSPI_CLK |  GPIO2_A1_d, C23 FSPI_D3  |  GPIO2_A5_u
part D pins: 1G14 VCCIO3_VCC, D21 --        |  SPI2_CLK      |  ETH_RMII0_RXD0    |  GPIO2_B0_d, D23 --        |  SPI2_CSN      |  ETH_RMII0_RXD1    |  GPIO2_B1_d, E21 --        |  SPI2_MOSI     |  ETH_RMII0_CLK     |  GPIO2_B2_d, E22 --        |  SPI2_MISO     |  ETH_RMII0_TXD0    |  GPIO2_B3_d, F21 SAI3_SCLK |  DSM_AUD_RN_M1 |  ETH_RMII0_TXD1    |  GPIO2_B4_d, F22 SAI3_SDI  |  DSM_AUD_LN_M1 |  ETH_RMII0_MDC     |  GPIO2_B6_d, F23 SAI3_LRCK |  DSM_AUD_RP_M1 |  ETH_RMII0_TXEN    |  GPIO2_B5_d, G21 SAI3_SDO  |  DSM_AUD_LP_M1 |  ETH_RMII0_MDIO    |  GPIO2_B7_d, G22 SAI3_MCLK |  --            |  ETH_RMII0_RXDVCRS |  GPIO2_C0_d
part E pins: 1H14 VCCIO4_VCC, H22 JTAG_TMS_M0       |  SDMMC_D3      |  GPIO3_A5_d, H23 JTAG_TCK_M0       |  SDMMC_D2      |  GPIO3_A4_d, J21 --                |  SDMMC_CMD     |  GPIO3_A1_d, K21 --                |  SDMMC_CLK     |  GPIO3_A0_d, K22 TEST_CLK_OUT      |  SDMMC_D1      |  GPIO3_A3_d, K23 --                |  SDMMC_D0      |  GPIO3_A2_d, L22 ETH_RMII1_RXD0    |  SAI2_SDI_M0   |  GPIO3_A6_d, M21 ETH_RMII1_TXD0    |  SAI2_LRCK_M0  |  GPIO3_B1_d, M22 ETH_RMII1_RXD1    |  SAI2_SCLK_M0  |  GPIO3_A7_d, M23 ETH_RMII1_CLK     |  SAI2_SDO_M0   |  GPIO3_B0_d, N21 ETH_RMII1_TXD1    |  UART5_CTSN_M0 |  GPIO3_B2_d, P21 ETH_RMII1_MDIO    |  UART5_RTSN_M0 |  GPIO3_B5_d, P22 ETH_RMII1_TXEN    |  UART5_RX_M0   |  GPIO3_B3_d, P23 ETH_RMII1_MDC     |  UART5_TX_M0   |  GPIO3_B4_d, R22 ETH_RMII1_RXDVCRS |  SAI2_MCLK_M0  |  GPIO3_B6_d
part F pins: 1A13 ACODEC_ADC_AVSS, 1B6 TSADC_VCC1V8, 1B7 MIPI_DPHY_AVDD1V8, 1B9 USB20_OTG_AVDD1V8, 1B10 USB20_OTG_AVDD3V3, 1B11 ACODEC_ADC_VCM, 1B12 ACODEC_ADC_AVDD1V6, 1B13 ACODEC_ADC_AVDD1V8, 1B14 OTP_AVDD1V8 |  SARADC_AVDD1V8, 1C7 MIPI_DPHY_AVDD0V9, 1C8 USB20_OTG_AVDD0V9, A11 MIPI_DPHY_DSI_TX_D0N  |  GPO4_A0_z, A12 MIPI_DPHY_DSI_TX_D1P  |  GPO4_A3_z, A15 USB20_OTG1_DM, A16 USB20_OTG0_DP, A19 ACODEC_ADC_INP, A20 SARADC_IN0 |  GPIO4_B0_z, A21 SARADC_IN2 |  GPIO4_B2_z, B11 MIPI_DPHY_DSI_TX_D0P  |  GPO4_A1_z, B12 MIPI_DPHY_DSI_TX_D1N  |  GPO4_A2_z, B13 MIPI_DPHY_DSI_TX_CLKP |  GPO4_A5_z, B14 MIPI_DPHY_DSI_TX_CLKN |  GPO4_A4_z, B15 USB20_OTG1_DP, B16 USB20_OTG0_DM, B17 USB20_OTG0_ID, B18 USB20_OTG0_VBUSDET, B19 ACODEC_ADC_INN, B20 SARADC_IN1 |  GPIO4_B1_z, B21 SARADC_IN3 |  GPIO4_B3_z
part G pins: 1C2 CPU_DVDD_0, 1C3 CPU_DVDD_1, 1C4 CPU_DVDD_2, 1E4 LOGIC_DVDD_0, 1E5 LOGIC_DVDD_1, 1E6 LOGIC_DVDD_2, 1F11 LOGIC_DVDD_3, 1G11 LOGIC_DVDD_4, 1H11 LOGIC_DVDD_5, 1J10 LOGIC_DVDD_6
part H pins: 1K5 DDR_OPEN1, 1K6 DDR_VDDQ_0, 1K7 DDR_VDDQ_1, 1K8 DDR_VDDQ_2, 1K9 DDR_VDDQ_3, 1K10 DDR_VDDQ_4, 1L6 DDR_OPEN0, 1L8 DDR_RZQ, 1L10 DDR_VREF_CA, 1L11 DDR_VREF_DQ, 1M4 DDR_DM1, 1M5 DDR_DQ4, 1M6 DDR_DQ3, 1M8 DDR2_WEN  |  DDR3_RASN, 1M9 DDR2_BA1  |   DDR3_WEN, 1M11 DDR_CSN, 1M13 DDR3_RESET, 1N1 DDR_DQ14, 1N2 DDR_DQ15, 1N4 DDR_DM0, 1N5 DDR_DQ7, 1N6 DDR_DQ5, 1N8 DDR2_BA0  |  DDR3_CASN, 1N9 DDR2_BA2  |   DDR3_BA2, 1N10 DDR_ODT, 1N12 DDR2_A10  |   DDR3_BA0, 1N13 DDR2_A1   |    DDR3_A3, 1N14 DDR2_A5   |    DDR3_A5, T22 DDR2_A9   |    DDR3_A7, T23 DDR2_A13  |   DDR3_A13, U22 DDR2_A12  |    DDR3_A9, V22 DDR2_A7   |    DDR3_A2, V23 DDR2_A3   |    DDR3_A0, W4 DDR_DQS1N, W6 DDR_DQ12, W7 DDR_DQ9, W9 DDR_DQ6, W10 DDR_DQS0N, W14 DDR_CLKN, W15 DDR_CKE, W17 DDR2_RASN |   DDR3_A10, W18 DDR2_A2   |    DDR3_A4, W20 DDR2_A4   |    DDR3_A1, W22 DDR2_A11  |   DDR3_A11, W23 DDR2_A0   |   DDR3_A12, Y2 DDR_DQ13, Y3 DDR_DQ11, Y4 DDR_DQS1P, Y6 DDR_DQ10, Y7 DDR_DQ8, Y10 DDR_DQS0P, Y11 DDR_DQ2, Y12 DDR_DQ1, Y13 DDR_DQ0, Y14 DDR_CLKP, Y17 DDR2_A15  |   DDR3_A15, Y18 DDR2_CASN |   DDR3_BA1, Y20 DDR2_A6   |    DDR3_A6, Y21 DDR2_A8   |    DDR3_A8, Y22 DDR2_A14  |   DDR3_A14
part I pins: 1A6 VSS_32, 1A7 VSS_33, 1A8 VSS_34, 1A9 VSS_35, 1A10 VSS_36, 1A11 VSS_37, 1A12 VSS_38, 1A14 VSS_39, 1B1 VSS_40, 1B2 VSS_41, 1B3 VSS_42, 1B4 VSS_43, 1B5 VSS_44, 1B8 VSS_45, 1C1 VSS_46, 1C5 VSS_47, 1C6 VSS_48, 1C9 VSS_49, 1C10 VSS_50, 1C11 VSS_51, 1C12 VSS_52, 1C13 VSS_53, 1C14 VSS_54, 1D1 VSS_55, 1D2 VSS_56, 1D3 VSS_57, 1D4 VSS_58, 1D5 VSS_59, 1D6 VSS_60, 1D7 VSS_61, 1D8 VSS_62, 1D9 VSS_63, 1D10 VSS_64, 1D11 VSS_65, 1D12 VSS_66, 1D13 VSS_67, 1D14 VSS_68, 1E1 VSS_69, A1 VSS_0, A13 VSS_1, A17 VSS_2, A23 VSS_3, B4 VSS_4, B6 VSS_5, D2 VSS_6, D22 VSS_7, G2 VSS_8, H21 VSS_9, J3 VSS_10, J22 VSS_11, L3 VSS_12, L21 VSS_13, N22 VSS_14, R21 VSS_15, T21 VSS_16, U21 VSS_17, V21 VSS_18, W3 VSS_19, W5 VSS_20, W8 VSS_21, W11 VSS_22, W12 VSS_23, W13 VSS_24, W16 VSS_25, W19 VSS_26, W21 VSS_27, Y1 VSS_28, Y9 VSS_29, Y15 VSS_30, Y23 VSS_31
part J pins: 1E2 VSS_70, 1E12 VSS_71, 1E13 VSS_72, 1E14 VSS_73, 1F1 VSS_74, 1F2 VSS_75, 1F4 VSS_76, 1F5 VSS_77, 1F6 VSS_78, 1F7 VSS_79, 1F8 VSS_80, 1F9 VSS_81, 1F10 VSS_82, 1F12 VSS_83, 1F13 VSS_84, 1G1 VSS_85, 1G3 VSS_86, 1G4 VSS_87, 1G5 VSS_88, 1G6 VSS_89, 1G7 VSS_90, 1G8 VSS_91, 1G9 VSS_92, 1G10 VSS_93, 1G12 VSS_94, 1G13 VSS_95, 1H2 VSS_96, 1H3 VSS_97, 1H4 VSS_98, 1H5 VSS_99, 1H6 VSS_100, 1H7 VSS_101, 1H8 VSS_102, 1H9 VSS_103, 1H10 VSS_104, 1H12 VSS_105, 1H13 VSS_106, 1J1 VSS_107, 1J2 VSS_108, 1J3 VSS_109, 1J4 VSS_110, 1J5 VSS_111, 1J6 VSS_112, 1J7 VSS_113, 1J8 VSS_114, 1J9 VSS_115, 1J11 VSS_116, 1J13 VSS_117, 1J14 VSS_118, 1K1 VSS_119, 1K4 VSS_120, 1K14 VSS_121, 1L2 VSS_122, 1L3 VSS_123, 1L4 VSS_124, 1L5 VSS_125, 1L7 VSS_126, 1L9 VSS_127, 1L14 VSS_128, 1M1 VSS_129, 1M2 VSS_130, 1M3 VSS_131, 1M7 VSS_132, 1M10 VSS_133, 1M12 VSS_134, 1M14 VSS_135, 1N3 VSS_136, 1N7 VSS_137, 1N11 VSS_138
part A text: OSC/PLL; Operating Voltage=1.8V Only; PMUIO Domain; Operating Voltage=3.3V Only
part B text: VCCIO1 Domain; Operating Voltage=1.8V/3.3V
part C text: VCCIO2 Domain; Operating Voltage=1.8V/3.3V
part D text: VCCIO3 Domain; Operating Voltage=1.8V/3.3V; SPI2 only support slave
part E text: VCCIO4 Domain; Operating Voltage=1.8V/3.3V
part F text: MIPI; Operating Voltage=1.8V; GPO is output only; USB2.0 OTG0; HS/FS/LS; (Download Port); USB2.0 OTG1; USB2.0 PHY Power; for OTG0/1; SARADC; TSADC; ACODEC
part G text: CPU; LOGIC
part H text: DDR2; DDR3; DDR3=1.5V / DDR3L=1.35V / DDR2=1.8V

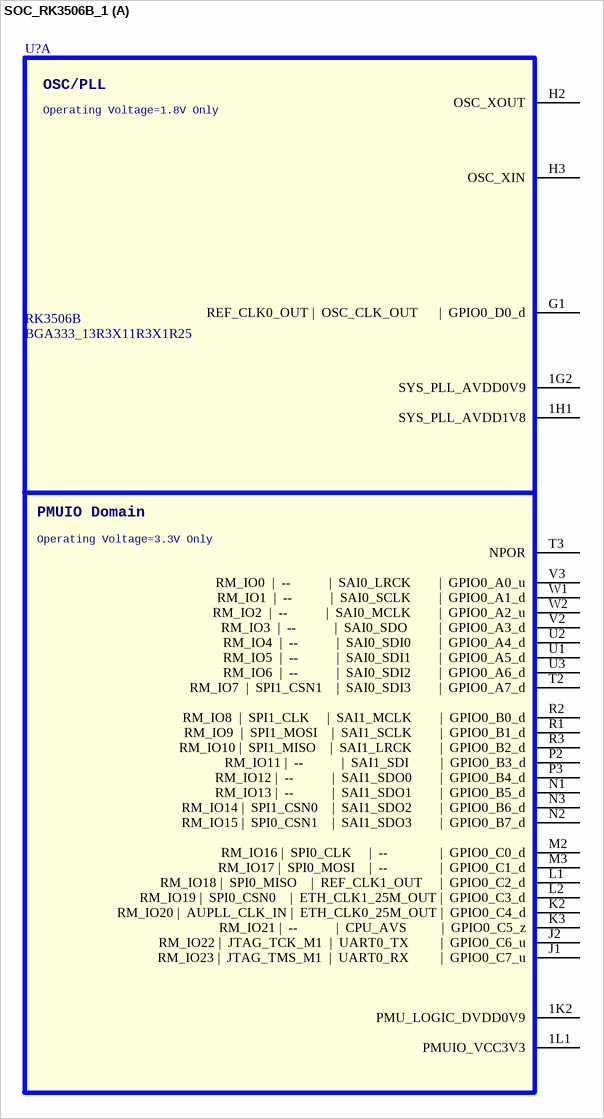
[diagram p4: symbol SOC_RK3506B_1]

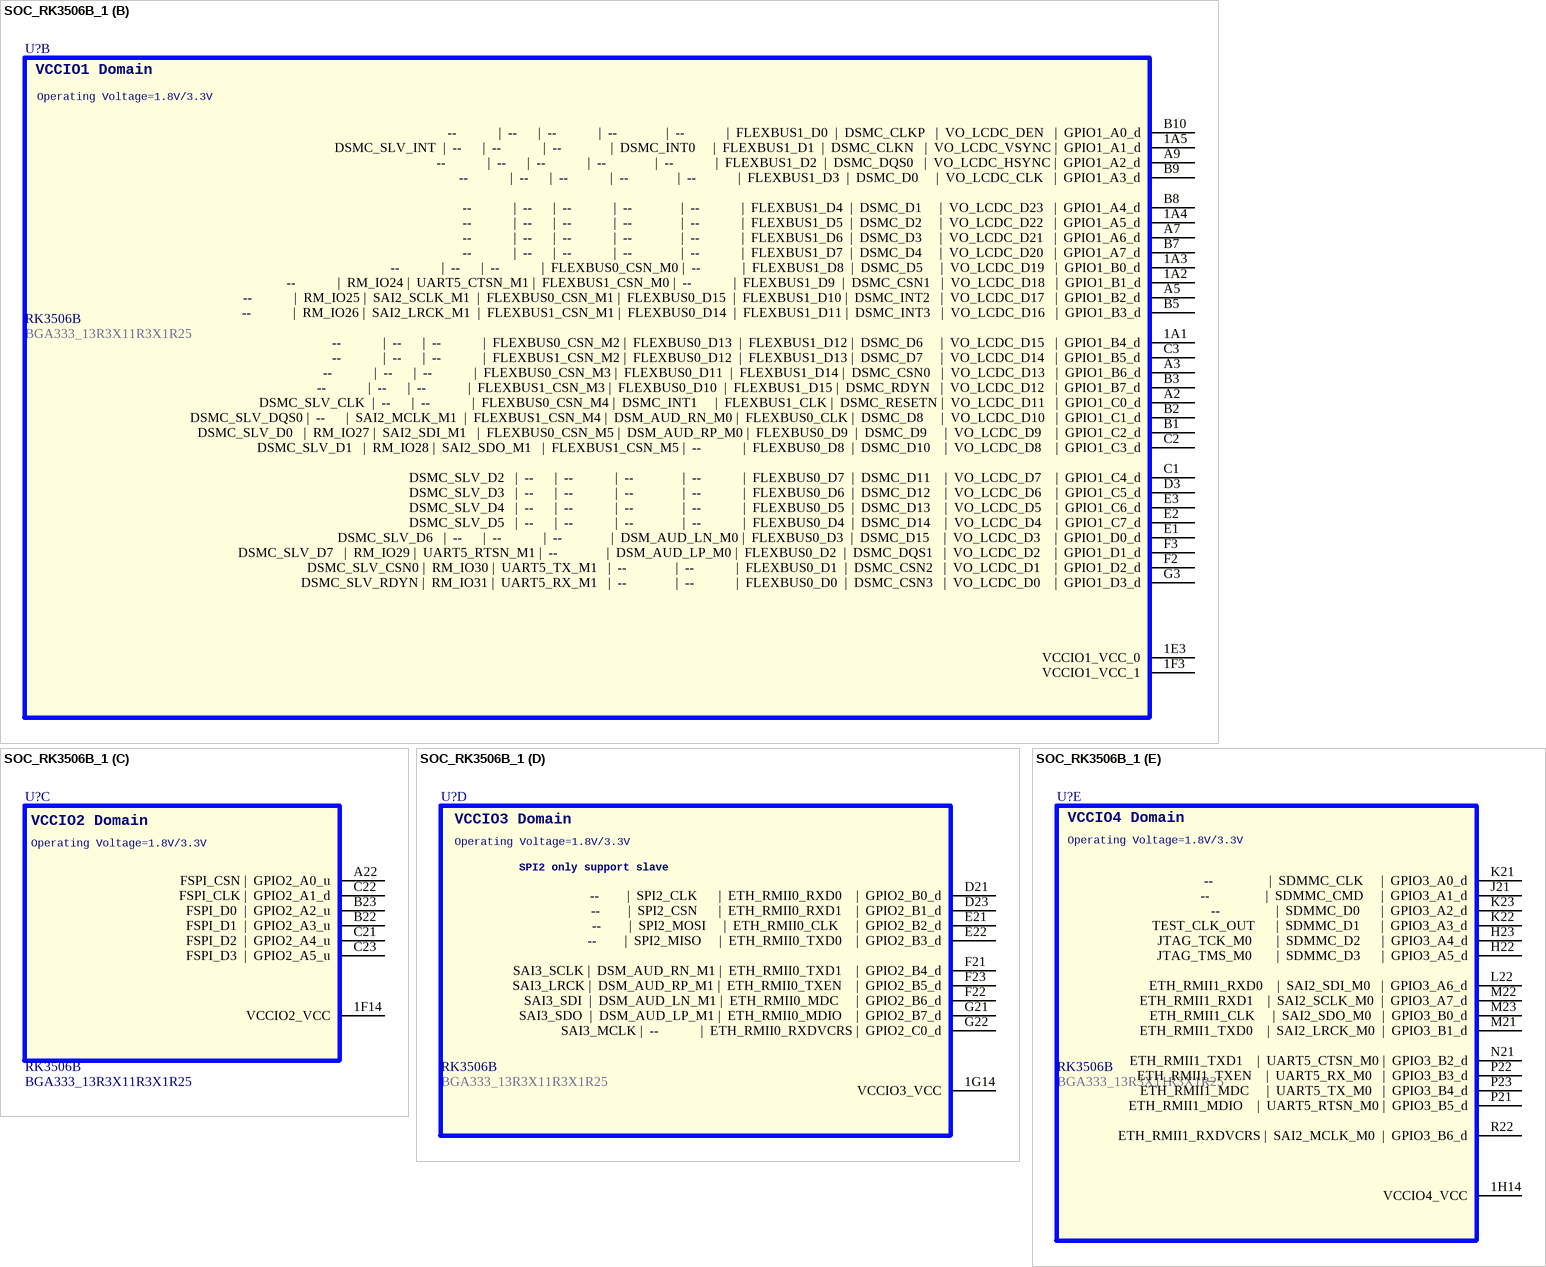
[diagram p5: symbol SOC_RK3506B_1]

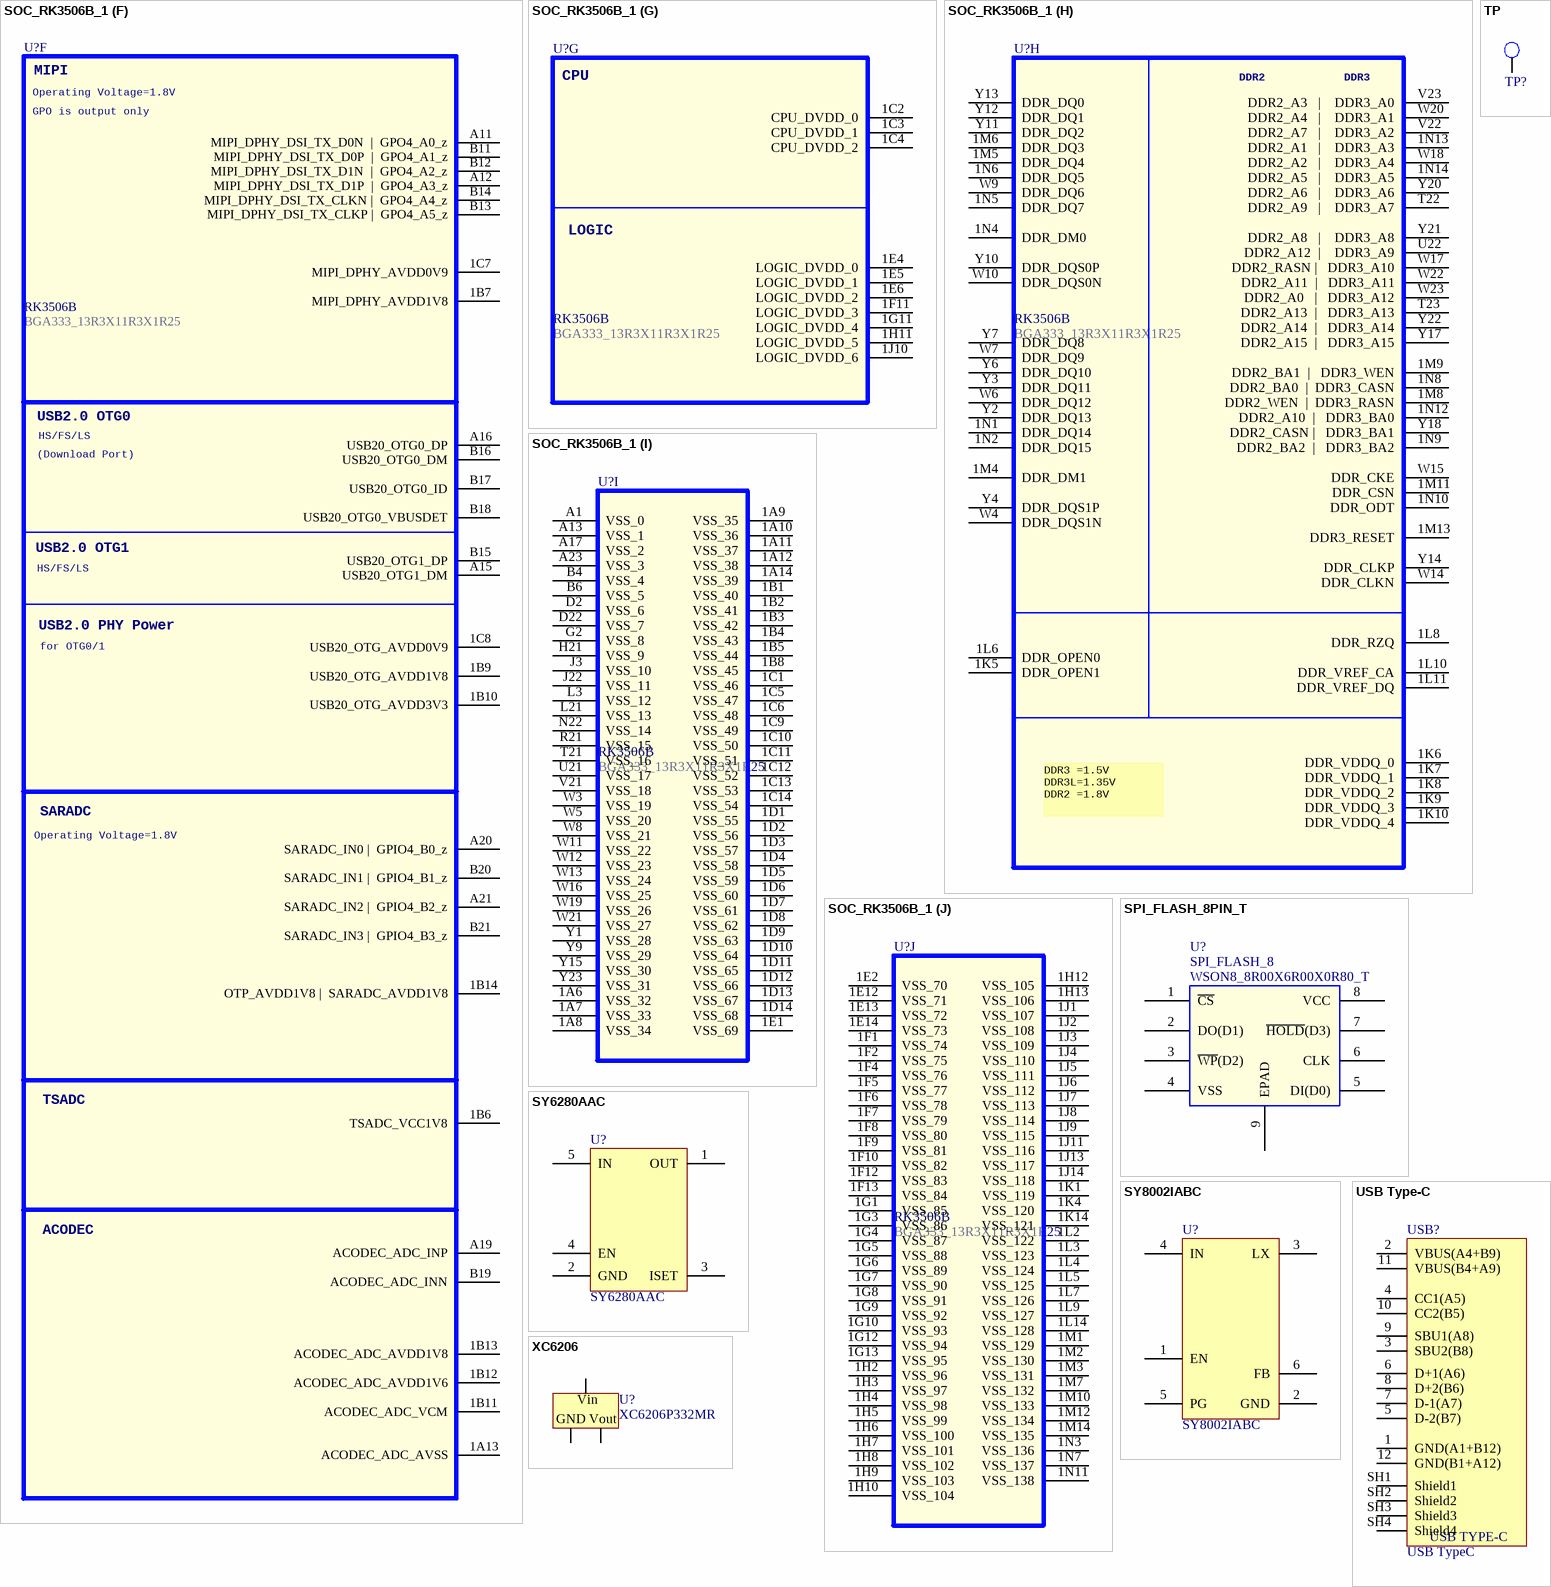
[diagram p6: symbols SOC_RK3506B_1 to XC6206]

## SOC_RK3506B_1
designator U?, comment RK3506B  PCB Footprint: BGA333_13R3X11R3X1R25
SPLIT_INST: TURE
footprint BGA333_13R30X11R30X1R25
footprint BGA333_13R3X11R3X1R25
part A pins: 1G2 SYS_PLL_AVDD0V9, 1H1 SYS_PLL_AVDD1V8, 1K2 PMU_LOGIC_DVDD0V9, 1L1 PMUIO_VCC3V3, G1 REF_CLK0_OUT |  OSC_CLK_OUT      |  GPIO0_D0_d, H2 OSC_XOUT, H3 OSC_XIN, J1 RM_IO23 |  JTAG_TMS_M1  |  UART0_RX         |  GPIO0_C7_u, J2 RM_IO22 |  JTAG_TCK_M1  |  UART0_TX         |  GPIO0_C6_u, K2 RM_IO20 |  AUPLL_CLK_IN |  ETH_CLK0_25M_OUT |  GPIO0_C4_d, K3 RM_IO21 |  --           |  CPU_AVS          |  GPIO0_C5_z, L1 RM_IO18 |  SPI0_MISO    |  REF_CLK1_OUT     |  GPIO0_C2_d, L2 RM_IO19 |  SPI0_CSN0    |  ETH_CLK1_25M_OUT |  GPIO0_C3_d, M2 RM_IO16 |  SPI0_CLK     |  --               |  GPIO0_C0_d, M3 RM_IO17 |  SPI0_MOSI    |  --               |  GPIO0_C1_d, N1 RM_IO13 |  --           |  SAI1_SDO1        |  GPIO0_B5_d, N2 RM_IO15 |  SPI0_CSN1    |  SAI1_SDO3        |  GPIO0_B7_d, N3 RM_IO14 |  SPI1_CSN0    |  SAI1_SDO2        |  GPIO0_B6_d, P2 RM_IO11 |  --           |  SAI1_SDI         |  GPIO0_B3_d, P3 RM_IO12 |  --           |  SAI1_SDO0        |  GPIO0_B4_d, R1 RM_IO9  |  SPI1_MOSI    |  SAI1_SCLK        |  GPIO0_B1_d, R2 RM_IO8  |  SPI1_CLK     |  SAI1_MCLK        |  GPIO0_B0_d, R3 RM_IO10 |  SPI1_MISO    |  SAI1_LRCK        |  GPIO0_B2_d, T2 RM_IO7  |  SPI1_CSN1    |  SAI0_SDI3        |  GPIO0_A7_d, T3 NPOR, U1 RM_IO5  |  --           |  SAI0_SDI1        |  GPIO0_A5_d, U2 RM_IO4  |  --           |  SAI0_SDI0        |  GPIO0_A4_d, U3 RM_IO6  |  --           |  SAI0_SDI2        |  GPIO0_A6_d, V2 RM_IO3  |  --           |  SAI0_SDO         |  GPIO0_A3_d, V3 RM_IO0  |  --           |  SAI0_LRCK        |  GPIO0_A0_u, W1 RM_IO1  |  --           |  SAI0_SCLK        |  GPIO0_A1_d, W2 RM_IO2  |  --           |  SAI0_MCLK        |  GPIO0_A2_u
part B pins: 1A1 --            |  --      |  --            |  FLEXBUS0_CSN_M2 |  FLEXBUS0_D13  |  FLEXBUS1_D12 |  DSMC_D6     |  VO_LCDC_D15   |  GPIO1_B4_d, 1A2 --            |  RM_IO24 |  UART5_CTSN_M1 |  FLEXBUS1_CSN_M0 |  --            |  FLEXBUS1_D9  |  DSMC_CSN1   |  VO_LCDC_D18   |  GPIO1_B1_d, 1A3 --            |  --      |  --            |  FLEXBUS0_CSN_M0 |  --            |  FLEXBUS1_D8  |  DSMC_D5     |  VO_LCDC_D19   |  GPIO1_B0_d, 1A4 --            |  --      |  --            |  --              |  --            |  FLEXBUS1_D5  |  DSMC_D2     |  VO_LCDC_D22   |  GPIO1_A5_d, 1A5 DSMC_SLV_INT  |  --      |  --            |  --              |  DSMC_INT0     |  FLEXBUS1_D1  |  DSMC_CLKN   |  VO_LCDC_VSYNC |  GPIO1_A1_d, 1E3 VCCIO1_VCC_0, 1F3 VCCIO1_VCC_1, A2 DSMC_SLV_CLK  |  --      |  --            |  FLEXBUS0_CSN_M4 |  DSMC_INT1     |  FLEXBUS1_CLK |  DSMC_RESETN |  VO_LCDC_D11   |  GPIO1_C0_d, A3 --            |  --      |  --            |  FLEXBUS0_CSN_M3 |  FLEXBUS0_D11  |  FLEXBUS1_D14 |  DSMC_CSN0   |  VO_LCDC_D13   |  GPIO1_B6_d, A5 --            |  RM_IO25 |  SAI2_SCLK_M1  |  FLEXBUS0_CSN_M1 |  FLEXBUS0_D15  |  FLEXBUS1_D10 |  DSMC_INT2   |  VO_LCDC_D17   |  GPIO1_B2_d, A7 --            |  --      |  --            |  --              |  --            |  FLEXBUS1_D6  |  DSMC_D3     |  VO_LCDC_D21   |  GPIO1_A6_d, A9 --            |  --      |  --            |  --              |  --            |  FLEXBUS1_D2  |  DSMC_DQS0   |  VO_LCDC_HSYNC |  GPIO1_A2_d, B1 DSMC_SLV_D0   |  RM_IO27 |  SAI2_SDI_M1   |  FLEXBUS0_CSN_M5 |  DSM_AUD_RP_M0 |  FLEXBUS0_D9  |  DSMC_D9     |  VO_LCDC_D9    |  GPIO1_C2_d, B2 DSMC_SLV_DQS0 |  --      |  SAI2_MCLK_M1  |  FLEXBUS1_CSN_M4 |  DSM_AUD_RN_M0 |  FLEXBUS0_CLK |  DSMC_D8     |  VO_LCDC_D10   |  GPIO1_C1_d, B3 --            |  --      |  --            |  FLEXBUS1_CSN_M3 |  FLEXBUS0_D10  |  FLEXBUS1_D15 |  DSMC_RDYN   |  VO_LCDC_D12   |  GPIO1_B7_d, B5 --            |  RM_IO26 |  SAI2_LRCK_M1  |  FLEXBUS1_CSN_M1 |  FLEXBUS0_D14  |  FLEXBUS1_D11 |  DSMC_INT3   |  VO_LCDC_D16   |  GPIO1_B3_d, B7 --            |  --      |  --            |  --              |  --            |  FLEXBUS1_D7  |  DSMC_D4     |  VO_LCDC_D20   |  GPIO1_A7_d, B8 --            |  --      |  --            |  --              |  --            |  FLEXBUS1_D4  |  DSMC_D1     |  VO_LCDC_D23   |  GPIO1_A4_d, B9 --            |  --      |  --            |  --              |  --            |  FLEXBUS1_D3  |  DSMC_D0     |  VO_LCDC_CLK   |  GPIO1_A3_d, B10 --            |  --      |  --            |  --              |  --            |  FLEXBUS1_D0  |  DSMC_CLKP   |  VO_LCDC_DEN   |  GPIO1_A0_d, C1 DSMC_SLV_D2   |  --      |  --            |  --              |  --            |  FLEXBUS0_D7  |  DSMC_D11    |  VO_LCDC_D7    |  GPIO1_C4_d, C2 DSMC_SLV_D1   |  RM_IO28 |  SAI2_SDO_M1   |  FLEXBUS1_CSN_M5 |  --            |  FLEXBUS0_D8  |  DSMC_D10    |  VO_LCDC_D8    |  GPIO1_C3_d, C3 --            |  --      |  --            |  FLEXBUS1_CSN_M2 |  FLEXBUS0_D12  |  FLEXBUS1_D13 |  DSMC_D7     |  VO_LCDC_D14   |  GPIO1_B5_d, D3 DSMC_SLV_D3   |  --      |  --            |  --              |  --            |  FLEXBUS0_D6  |  DSMC_D12    |  VO_LCDC_D6    |  GPIO1_C5_d, E1 DSMC_SLV_D6   |  --      |  --            |  --              |  DSM_AUD_LN_M0 |  FLEXBUS0_D3  |  DSMC_D15    |  VO_LCDC_D3    |  GPIO1_D0_d, E2 DSMC_SLV_D5   |  --      |  --            |  --              |  --            |  FLEXBUS0_D4  |  DSMC_D14    |  VO_LCDC_D4    |  GPIO1_C7_d, E3 DSMC_SLV_D4   |  --      |  --            |  --              |  --            |  FLEXBUS0_D5  |  DSMC_D13    |  VO_LCDC_D5    |  GPIO1_C6_d, F2 DSMC_SLV_CSN0 |  RM_IO30 |  UART5_TX_M1   |  --              |  --            |  FLEXBUS0_D1  |  DSMC_CSN2   |  VO_LCDC_D1    |  GPIO1_D2_d, F3 DSMC_SLV_D7   |  RM_IO29 |  UART5_RTSN_M1 |  --              |  DSM_AUD_LP_M0 |  FLEXBUS0_D2  |  DSMC_DQS1   |  VO_LCDC_D2    |  GPIO1_D1_d, G3 DSMC_SLV_RDYN |  RM_IO31 |  UART5_RX_M1   |  --              |  --            |  FLEXBUS0_D0  |  DSMC_CSN3   |  VO_LCDC_D0    |  GPIO1_D3_d
part C pins: 1F14 VCCIO2_VCC, A22 FSPI_CSN |  GPIO2_A0_u, B22 FSPI_D1  |  GPIO2_A3_u, B23 FSPI_D0  |  GPIO2_A2_u, C21 FSPI_D2  |  GPIO2_A4_u, C22 FSPI_CLK |  GPIO2_A1_d, C23 FSPI_D3  |  GPIO2_A5_u
part D pins: 1G14 VCCIO3_VCC, D21 --        |  SPI2_CLK      |  ETH_RMII0_RXD0    |  GPIO2_B0_d, D23 --        |  SPI2_CSN      |  ETH_RMII0_RXD1    |  GPIO2_B1_d, E21 --        |  SPI2_MOSI     |  ETH_RMII0_CLK     |  GPIO2_B2_d, E22 --        |  SPI2_MISO     |  ETH_RMII0_TXD0    |  GPIO2_B3_d, F21 SAI3_SCLK |  DSM_AUD_RN_M1 |  ETH_RMII0_TXD1    |  GPIO2_B4_d, F22 SAI3_SDI  |  DSM_AUD_LN_M1 |  ETH_RMII0_MDC     |  GPIO2_B6_d, F23 SAI3_LRCK |  DSM_AUD_RP_M1 |  ETH_RMII0_TXEN    |  GPIO2_B5_d, G21 SAI3_SDO  |  DSM_AUD_LP_M1 |  ETH_RMII0_MDIO    |  GPIO2_B7_d, G22 SAI3_MCLK |  --            |  ETH_RMII0_RXDVCRS |  GPIO2_C0_d
part E pins: 1H14 VCCIO4_VCC, H22 JTAG_TMS_M0       |  SDMMC_D3      |  GPIO3_A5_d, H23 JTAG_TCK_M0       |  SDMMC_D2      |  GPIO3_A4_d, J21 --                |  SDMMC_CMD     |  GPIO3_A1_d, K21 --                |  SDMMC_CLK     |  GPIO3_A0_d, K22 TEST_CLK_OUT      |  SDMMC_D1      |  GPIO3_A3_d, K23 --                |  SDMMC_D0      |  GPIO3_A2_d, L22 ETH_RMII1_RXD0    |  SAI2_SDI_M0   |  GPIO3_A6_d, M21 ETH_RMII1_TXD0    |  SAI2_LRCK_M0  |  GPIO3_B1_d, M22 ETH_RMII1_RXD1    |  SAI2_SCLK_M0  |  GPIO3_A7_d, M23 ETH_RMII1_CLK     |  SAI2_SDO_M0   |  GPIO3_B0_d, N21 ETH_RMII1_TXD1    |  UART5_CTSN_M0 |  GPIO3_B2_d, P21 ETH_RMII1_MDIO    |  UART5_RTSN_M0 |  GPIO3_B5_d, P22 ETH_RMII1_TXEN    |  UART5_RX_M0   |  GPIO3_B3_d, P23 ETH_RMII1_MDC     |  UART5_TX_M0   |  GPIO3_B4_d, R22 ETH_RMII1_RXDVCRS |  SAI2_MCLK_M0  |  GPIO3_B6_d
part F pins: 1A13 ACODEC_ADC_AVSS, 1B6 TSADC_VCC1V8, 1B7 MIPI_DPHY_AVDD1V8, 1B9 USB20_OTG_AVDD1V8, 1B10 USB20_OTG_AVDD3V3, 1B11 ACODEC_ADC_VCM, 1B12 ACODEC_ADC_AVDD1V6, 1B13 ACODEC_ADC_AVDD1V8, 1B14 OTP_AVDD1V8 |  SARADC_AVDD1V8, 1C7 MIPI_DPHY_AVDD0V9, 1C8 USB20_OTG_AVDD0V9, A11 MIPI_DPHY_DSI_TX_D0N  |  GPO4_A0_z, A12 MIPI_DPHY_DSI_TX_D1P  |  GPO4_A3_z, A15 USB20_OTG1_DM, A16 USB20_OTG0_DP, A19 ACODEC_ADC_INP, A20 SARADC_IN0 |  GPIO4_B0_z, A21 SARADC_IN2 |  GPIO4_B2_z, B11 MIPI_DPHY_DSI_TX_D0P  |  GPO4_A1_z, B12 MIPI_DPHY_DSI_TX_D1N  |  GPO4_A2_z, B13 MIPI_DPHY_DSI_TX_CLKP |  GPO4_A5_z, B14 MIPI_DPHY_DSI_TX_CLKN |  GPO4_A4_z, B15 USB20_OTG1_DP, B16 USB20_OTG0_DM, B17 USB20_OTG0_ID, B18 USB20_OTG0_VBUSDET, B19 ACODEC_ADC_INN, B20 SARADC_IN1 |  GPIO4_B1_z, B21 SARADC_IN3 |  GPIO4_B3_z
part G pins: 1C2 CPU_DVDD_0, 1C3 CPU_DVDD_1, 1C4 CPU_DVDD_2, 1E4 LOGIC_DVDD_0, 1E5 LOGIC_DVDD_1, 1E6 LOGIC_DVDD_2, 1F11 LOGIC_DVDD_3, 1G11 LOGIC_DVDD_4, 1H11 LOGIC_DVDD_5, 1J10 LOGIC_DVDD_6
part H pins: 1K5 DDR_OPEN1, 1K6 DDR_VDDQ_0, 1K7 DDR_VDDQ_1, 1K8 DDR_VDDQ_2, 1K9 DDR_VDDQ_3, 1K10 DDR_VDDQ_4, 1L6 DDR_OPEN0, 1L8 DDR_RZQ, 1L10 DDR_VREF_CA, 1L11 DDR_VREF_DQ, 1M4 DDR_DM1, 1M5 DDR_DQ4, 1M6 DDR_DQ3, 1M8 DDR2_WEN  |  DDR3_RASN, 1M9 DDR2_BA1  |   DDR3_WEN, 1M11 DDR_CSN, 1M13 DDR3_RESET, 1N1 DDR_DQ14, 1N2 DDR_DQ15, 1N4 DDR_DM0, 1N5 DDR_DQ7, 1N6 DDR_DQ5, 1N8 DDR2_BA0  |  DDR3_CASN, 1N9 DDR2_BA2  |   DDR3_BA2, 1N10 DDR_ODT, 1N12 DDR2_A10  |   DDR3_BA0, 1N13 DDR2_A1   |    DDR3_A3, 1N14 DDR2_A5   |    DDR3_A5, T22 DDR2_A9   |    DDR3_A7, T23 DDR2_A13  |   DDR3_A13, U22 DDR2_A12  |    DDR3_A9, V22 DDR2_A7   |    DDR3_A2, V23 DDR2_A3   |    DDR3_A0, W4 DDR_DQS1N, W6 DDR_DQ12, W7 DDR_DQ9, W9 DDR_DQ6, W10 DDR_DQS0N, W14 DDR_CLKN, W15 DDR_CKE, W17 DDR2_RASN |   DDR3_A10, W18 DDR2_A2   |    DDR3_A4, W20 DDR2_A4   |    DDR3_A1, W22 DDR2_A11  |   DDR3_A11, W23 DDR2_A0   |   DDR3_A12, Y2 DDR_DQ13, Y3 DDR_DQ11, Y4 DDR_DQS1P, Y6 DDR_DQ10, Y7 DDR_DQ8, Y10 DDR_DQS0P, Y11 DDR_DQ2, Y12 DDR_DQ1, Y13 DDR_DQ0, Y14 DDR_CLKP, Y17 DDR2_A15  |   DDR3_A15, Y18 DDR2_CASN |   DDR3_BA1, Y20 DDR2_A6   |    DDR3_A6, Y21 DDR2_A8   |    DDR3_A8, Y22 DDR2_A14  |   DDR3_A14
part I pins: 1A6 VSS_32, 1A7 VSS_33, 1A8 VSS_34, 1A9 VSS_35, 1A10 VSS_36, 1A11 VSS_37, 1A12 VSS_38, 1A14 VSS_39, 1B1 VSS_40, 1B2 VSS_41, 1B3 VSS_42, 1B4 VSS_43, 1B5 VSS_44, 1B8 VSS_45, 1C1 VSS_46, 1C5 VSS_47, 1C6 VSS_48, 1C9 VSS_49, 1C10 VSS_50, 1C11 VSS_51, 1C12 VSS_52, 1C13 VSS_53, 1C14 VSS_54, 1D1 VSS_55, 1D2 VSS_56, 1D3 VSS_57, 1D4 VSS_58, 1D5 VSS_59, 1D6 VSS_60, 1D7 VSS_61, 1D8 VSS_62, 1D9 VSS_63, 1D10 VSS_64, 1D11 VSS_65, 1D12 VSS_66, 1D13 VSS_67, 1D14 VSS_68, 1E1 VSS_69, A1 VSS_0, A13 VSS_1, A17 VSS_2, A23 VSS_3, B4 VSS_4, B6 VSS_5, D2 VSS_6, D22 VSS_7, G2 VSS_8, H21 VSS_9, J3 VSS_10, J22 VSS_11, L3 VSS_12, L21 VSS_13, N22 VSS_14, R21 VSS_15, T21 VSS_16, U21 VSS_17, V21 VSS_18, W3 VSS_19, W5 VSS_20, W8 VSS_21, W11 VSS_22, W12 VSS_23, W13 VSS_24, W16 VSS_25, W19 VSS_26, W21 VSS_27, Y1 VSS_28, Y9 VSS_29, Y15 VSS_30, Y23 VSS_31
part J pins: 1E2 VSS_70, 1E12 VSS_71, 1E13 VSS_72, 1E14 VSS_73, 1F1 VSS_74, 1F2 VSS_75, 1F4 VSS_76, 1F5 VSS_77, 1F6 VSS_78, 1F7 VSS_79, 1F8 VSS_80, 1F9 VSS_81, 1F10 VSS_82, 1F12 VSS_83, 1F13 VSS_84, 1G1 VSS_85, 1G3 VSS_86, 1G4 VSS_87, 1G5 VSS_88, 1G6 VSS_89, 1G7 VSS_90, 1G8 VSS_91, 1G9 VSS_92, 1G10 VSS_93, 1G12 VSS_94, 1G13 VSS_95, 1H2 VSS_96, 1H3 VSS_97, 1H4 VSS_98, 1H5 VSS_99, 1H6 VSS_100, 1H7 VSS_101, 1H8 VSS_102, 1H9 VSS_103, 1H10 VSS_104, 1H12 VSS_105, 1H13 VSS_106, 1J1 VSS_107, 1J2 VSS_108, 1J3 VSS_109, 1J4 VSS_110, 1J5 VSS_111, 1J6 VSS_112, 1J7 VSS_113, 1J8 VSS_114, 1J9 VSS_115, 1J11 VSS_116, 1J13 VSS_117, 1J14 VSS_118, 1K1 VSS_119, 1K4 VSS_120, 1K14 VSS_121, 1L2 VSS_122, 1L3 VSS_123, 1L4 VSS_124, 1L5 VSS_125, 1L7 VSS_126, 1L9 VSS_127, 1L14 VSS_128, 1M1 VSS_129, 1M2 VSS_130, 1M3 VSS_131, 1M7 VSS_132, 1M10 VSS_133, 1M12 VSS_134, 1M14 VSS_135, 1N3 VSS_136, 1N7 VSS_137, 1N11 VSS_138
part A text: OSC/PLL; Operating Voltage=1.8V Only; PMUIO Domain; Operating Voltage=3.3V Only
part B text: VCCIO1 Domain; Operating Voltage=1.8V/3.3V
part C text: VCCIO2 Domain; Operating Voltage=1.8V/3.3V
part D text: VCCIO3 Domain; Operating Voltage=1.8V/3.3V; SPI2 only support slave
part E text: VCCIO4 Domain; Operating Voltage=1.8V/3.3V
part F text: MIPI; Operating Voltage=1.8V; GPO is output only; USB2.0 OTG0; HS/FS/LS; (Download Port); USB2.0 OTG1; USB2.0 PHY Power; for OTG0/1; SARADC; TSADC; ACODEC
part G text: CPU; LOGIC
part H text: DDR2; DDR3; DDR3 =1.5V / DDR3L=1.35V / DDR2 =1.8V

## SPI_FLASH_8PIN_T
designator U?, comment SPI_FLASH_8  PCB Footprint: WSON8_8R00X6R00X0R80_T
SPI FLASH,8PIN; RK PN: 996000004; Priority: A; Part Type: SPI_FLASH; Manufacturer PN: SPI_FLASH_8; Created by: YWQ
footprint WSON8_8R00X6R00X0R80_T
pins: 1 ~{CS}, 2 DO(D1), 3 ~{WP}(D2), 4 VSS, 5 DI(D0), 6 CLK, 7 ~{HOLD}(D3), 8 VCC, 9 EPAD

## SY6280AAC
designator U?
footprint SOT23-5L (3x1.6x1.1mm(长宽高))
pins: 1 OUT, 2 GND, 3 ISET, 4 EN, 5 IN

## SY8002IABC
designator U?
footprint SOT23-6 (SOT23, 6-Leads, Body 3.0x3.0mm (max), Pitch 0.95mm, IPC Medium Density)
pins: 1 EN, 2 GND, 3 LX, 4 IN, 5 PG, 6 FB

## TP
designator TP?, comment TP_0.7  (value not drawn)
Test Point 0.7mm; RK PN: TESTPOINT_0R7; Priority: A; Part Type: TP; Created by: JJJ
footprint TEST 1 (测试点1mm)
footprint TEST 1 (测试点1mm)
pins: 1

## USB Type-C
designator USB?, comment USB TypeC
12P TypeC 母座; 版权归属: 正点原子; Parameter: 接口器件; 学习资源: www.openedv.com
footprint USB Type-C (USB Type-C 12P/16P)
footprint USB2.0-TYPE-C-16P (USB Type-C 12P/16P 加固定焊盘)
pins: 1 GND(A1+B12), 2 VBUS(A4+B9), 3 SBU2(B8), 4 CC1(A5), 5 D-2(B7), 6 D+1(A6), 7 D-1(A7), 8 D+2(B6), 9 SBU1(A8), 10 CC2(B5), 11 VBUS(B4+A9), 12 GND(B1+A12), SH1 Shield1, SH2 Shield2, SH3 Shield3, SH4 Shield4
text: USB TYPE-C

## XC6206
designator U?, comment XC6206P332MR
LDO 5.5V 200-300mA; 版权归属: 正点原子; Parameter: 芯片; Package: SOT-23; 学习资源: www.openedv.com
footprint SOT23-3L (3x1.3x1mm(长宽高))
footprint SOT23-3M (3x1.3x1mm(长宽高))
footprint SOT23-3N (3x1.3x1mm(长宽高))
pins: 1 GND, 2 Vout, 3 Vin